# Altium integrated library BViet_Altium_Lib.IntLib: 529 symbols (part 1 of 25)
Pins are listed as number, name and electrical type; pins without a type are passive.

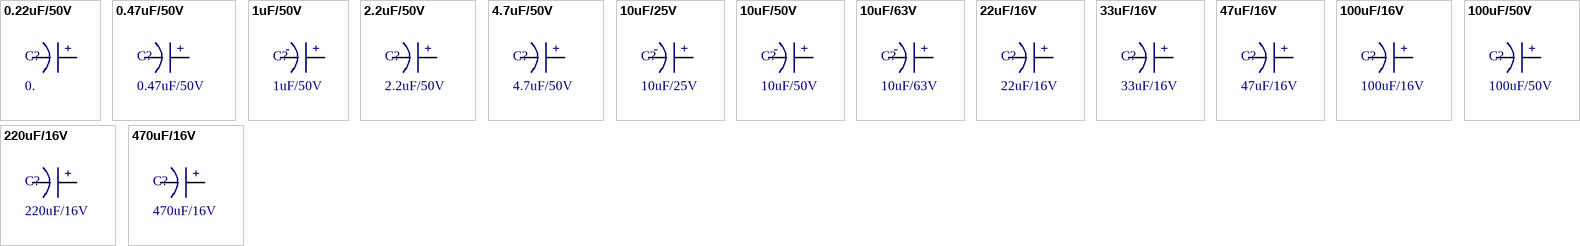
[diagram p0: symbols 0.22uF/50V to 470uF/16V]

## 0.22uF/50V
designator C?, comment 0.
Electrolytic Capacitor 0.22uF/50V
footprint 0.22uF/50V (ELECTROLYTIC CAPACITOR 4mm)
pins: 1, 2  2
text: +

## 0.47uF/50V
designator C?
Electrolytic Capacitor 0.47uF/50V
footprint 0.47uF/50V (ELECTROLYTIC CAPACITOR 4mm)
pins: 1, 2  2
text: +

## 1uF/50V
designator C?
Electrolytic Capacitor 1uF/50V
footprint 1uF/50V
pins: 1, 2  2
text: -; +

## 2.2uF/50V
designator C?
Electrolytic Capacitor 2.2uF/50V
footprint 2.2uF/50V (ELECTROLYTIC CAPACITOR 4mm)
pins: 1, 2  2
text: +

## 4.7uF/50V
designator C?
Electrolytic Capacitor 4.7uF/50V
footprint 4.7uF/50V (ELECTROLYTIC CAPACITOR 4mm)
pins: 1, 2  2
text: +

## 10uF/25V
designator C?
Electrolytic Capacitor 10uF/25V
footprint 10uF/25V 4mm (ELECTROLYTIC CAPACITOR 4mm)
footprint 10uF/25V 5mm (ELECTROLYTIC CAPACITOR 5mm)
pins: 1, 2  2
text: -; +

## 10uF/50V
designator C?
Electrolytic Capacitor 10uF/50V
footprint 10uF/50V (ELECTROLYTIC CAPACITOR 4mm)
pins: 1, 2  2
text: -; +

## 10uF/63V
designator C?
Electrolytic Capacitor 10uF/63V
footprint 10uF/63V
pins: 1, 2  2
text: -; +

## 22uF/16V
designator C?
Electrolytic Capacitor 22uF/16V
footprint 22uF/16V (ELECTROLYTIC CAPACITOR 5mm)
pins: 1, 2  2
text: +

## 33uF/16V
designator C?
Electrolytic Capacitor 33uF/16V
footprint 33uF/16V (ELECTROLYTIC CAPACITOR 5mm)
pins: 1, 2  2
text: +

## 47uF/16V
designator C?
Electrolytic Capacitor 47uF/16V
footprint 47uF/16V (ELECTROLYTIC CAPACITOR 4mm)
pins: 1, 2  2
text: +

## 100uF/16V
designator C?
Electrolytic Capacitor 100uF/16V
footprint 100uF/16V (ELECTROLYTIC CAPACITOR 6mm)
pins: 1, 2  2
text: +

## 100uF/50V
designator C?
Electrolytic Capacitor 100uF/50V
footprint 100uF/50V (ELECTROLYTIC CAPACITOR 4mm)
pins: 1, 2  2
text: +

## 220uF/16V
designator C?
Electrolytic Capacitor 220uF/16V
footprint 220uF/16V (ELECTROLYTIC CAPACITOR 6mm)
pins: 1, 2  2
text: +

## 470uF/16V
designator C?
Electrolytic Capacitor 470uF/16V
footprint 470uF/16V (ELECTROLYTIC CAPACITOR 6mm)
pins: 1, 2  2
text: +


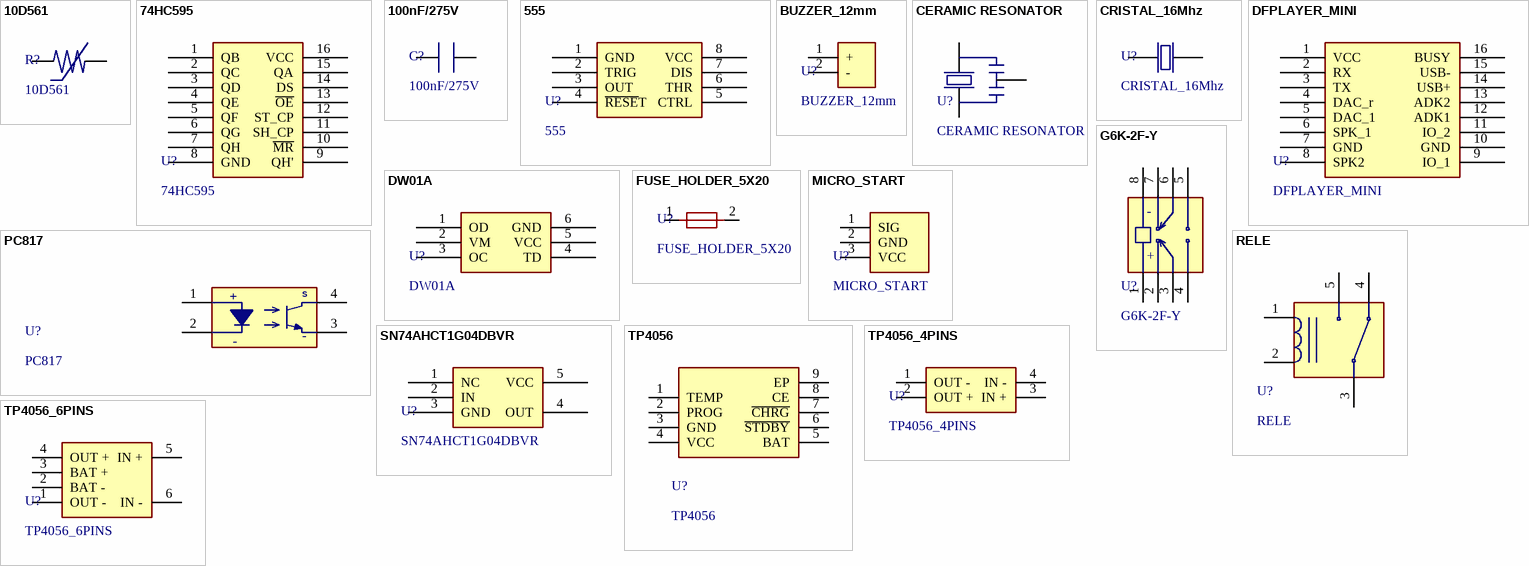
[diagram p1: symbols 10D561 to TP4056_6PINS]

## 10D561
designator R?
footprint 10D561
pins: 1, 2

## 74HC595
designator U?
SHIFT REGISTER 8-BIT DIP-16; ComponentLink1Description: Datasheet; ComponentLink1URL: https://www.ti.com/lit/ds/symlink/sn74hc595.pdf?ts=1673556046554&ref_url=https%253A%252F%252Fwww.ti.com%252Fproduct%252FSN74HC595; JLCPCB PN: C110383
footprint 74HC595 (SHIFT REGISTER 8-BIT DIP-16)
pins: 1 QB, 2 QC, 3 QD, 4 QE, 5 QF, 6 QG, 7 QH, 8 GND, 9 QH', 10 ~{MR}, 11 SH_CP, 12 ST_CP, 13 ~{OE}, 14 DS, 15 QA, 16 VCC

## 100nF/275V
designator C?
footprint 100nF/275V
pins: 1, 2

## 555
designator U?
CI TIMER/OSCILATOR 100kHz; ComponentLink1Description: Datasheet; ComponentLink1URL: https://www.ti.com/lit/ds/symlink/ne555.pdf?HQS=dis-mous-null-mousermode-dsf-pf-null-wwe&ts=1678668318661&ref_url=https%253A%252F%252Fwww.mouser.com%252F; JLCPCB PN SMD: C181735; JLCPCB PN DIP: C398063
footprint NE555_PTH
footprint NE555_SMD
pins: 1 GND, 2 TRIG, 3 OUT, 4 ~{RESE}T, 5 CTRL, 6 THR, 7 DIS, 8 VCC

## BUZZER_12mm
designator U?
BUZZER MAGNETIC 12MM; Digikey PN: 433-WT-1209T-ND; Mouser PN: 433-WT-1209T-ND; JLCPCB PN: C781866
footprint BUZZER_12mm (BUZZER MAGNETIC 12MM)
pins: 1 +, 2 -

## CERAMIC RESONATOR
designator U?
Generic Ceramic Ressonator 3.2x1.3mm
footprint CERAMIC_RESONATOR
pins: 1 (power), 2 (power), 3 (power)

## CRISTAL_16Mhz
designator U?
CRYSTAL 16MHZ, PTH and SMD; Mouser PN: 449-LFXTAL022786BULK; Digikey PN: 3155-16M20P2/49US-ND
footprint CRISTAL_16Mhz (CRYSTAL 16MHZ PTH)
footprint CRISTAL_16Mhz_SMD
pins: 1 (power), 2 (power)

## DFPLAYER_MINI
designator U?
MP3 Module, 3W, 3.3-5V.
footprint DFPLAYER_MINI
pins: 1 VCC, 2 RX, 3 TX, 4 DAC_r, 5 DAC_1, 6 SPK_1, 7 GND, 8 SPK2, 9 IO_1, 10 GND, 11 IO_2, 12 ADK1, 13 ADK2, 14 USB+, 15 USB-, 16 BUSY

## DW01A
designator U?
BATTERY PROTECTION IC  SOT-23-6; ComponentLink1Description: Datasheet; ComponentLink1URL: https://datasheet.lcsc.com/szlcsc/1901091236_PUOLOP-DW01A_C351410.pdf; JLCPCB PN: C2927799
footprint DW01A (BATTERY PROTECTION IC)
pins: 1 OD, 2 VM, 3 OC, 4 TD, 5 VCC, 6 GND

## FUSE_HOLDER_5X20
designator U?
footprint FUSE_HOLDER_5X20
pins: 1, 2

## G6K-2F-Y
designator U?
Micro Relé SMD Dual Channel, 5V/12V/24V, 6.5x10mm.
footprint G6K-2F-Y
pins: 1, 2, 3, 4, 5, 6, 7, 8
text: -; +

## MICRO_START
designator U?
Module Start for Robbot Sumo.
footprint MICRO_START
pins: 1 SIG, 2 GND, 3 VCC

## PC817
designator U?
Optocouplers Phototransistor 4 Pins, DIP and SMD.; ComponentLink1Description: Datasheet; ComponentLink1URL: https://www.farnell.com/datasheets/73758.pdf; JLCPCB PN SMD: C3025164; JLCPCB PN DIP: C3008368
footprint PC817_SMD
footprint PC817_DIP
pins: 1 VCC, 2 GND, 3 GND, 4 SIGNAL
text: +; S; -

## RELE
designator U?
Generic Rele PTH 5 Pins.
footprint RELE
pins: 1, 2, 3, 4, 5

## SN74AHCT1G04DBVR
designator U?
CI SINGLE INVERTER GATE, SOT-23-5.; Digikey PN: 296-1112-2-ND; Mouser PN: 595-SN74AHCT1G04DBVR; ComponentLink1Description: Datasheet; ComponentLink1URL: https://www.ti.com/lit/ds/symlink/sn74ahct1g04.pdf?ts=1678680622800&ref_url=https%253A%252F%252Fwww.google.com%252F; JLCPCB PN: C30326
footprint SN74AHCT1G04DBVR
pins: 1 NC, 2 IN, 3 GND, 4 OUT, 5 VCC

## TP4056
designator U?
CHIP BATTERY CHARGER 1A SOP-8-EP; ComponentLink1Description: Datasheet; ComponentLink1URL: https://dlnmh9ip6v2uc.cloudfront.net/datasheets/Prototyping/TP4056.pdf; JLCPCB PN: C725790
footprint TP4056 (CHIP BATTERY CHARGER)
pins: 1 TEMP, 2 PROG, 3 GND, 4 VCC, 5 BAT, 6 ~{STDBY}, 7 ~{CHRG}, 8 CE, 9 EP

## TP4056_4PINS
designator U?
MODULE BATTERY CHARGER 4 PINS
footprint TP4056_4PINs (MODULE BATTERY CHARGER)
pins: 1 OUT -, 2 OUT +, 3 IN +, 4 IN -

## TP4056_6PINS
designator U?
MODULE BATTERY CHARGER 6 PINS
footprint TP4056_6PINs (MODULE BATTERY CHARGER)
pins: 1 OUT -, 2 BAT -, 3 BAT +, 4 OUT +, 5 IN +, 6 IN -


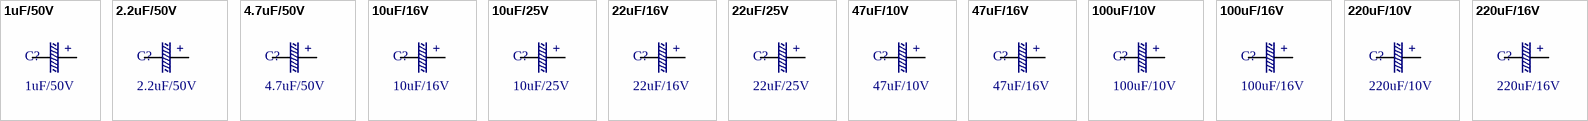
[diagram p2: symbols 1uF/50V to 220uF/16V]

## 1uF/50V
designator C?
Aluminum Capacitor 1uF/50V 4mm
footprint ALUMINUM_4mm (ALUMINUM CAPACITOR 4mm)
pins: 1, 2
text: +

## 2.2uF/50V
designator C?
Aluminum Capacitor 2.2uF/50V 4mm
footprint ALUMINUM_4mm (ALUMINUM CAPACITOR 4mm)
pins: 1, 2
text: +

## 4.7uF/50V
designator C?
Aluminum Capacitor 4.7uF/50V 4mm
footprint ALUMINUM_4mm (ALUMINUM CAPACITOR 4mm)
pins: 1, 2
text: +

## 10uF/16V
designator C?
Aluminum Capacitor 10uF/16V 4mm
footprint ALUMINUM_4mm (ALUMINUM CAPACITOR 4mm)
pins: 1, 2
text: +

## 10uF/25V
designator C?
Aluminum Capacitor 10uF/25V 4mm
footprint ALUMINUM_4mm (ALUMINUM CAPACITOR 4mm)
pins: 1, 2
text: +

## 22uF/16V
designator C?
Aluminum Capacitor 22uF/16V 4mm
footprint ALUMINUM_4mm (ALUMINUM CAPACITOR 4mm)
pins: 1, 2
text: +

## 22uF/25V
designator C?
Aluminum Capacitor 22uF/25V 5mm
footprint ALUMINUM_5mm (ALUMINUM CAPACITOR 5mm)
pins: 1, 2
text: +

## 47uF/10V
designator C?
Aluminum Capacitor 47uF/10V 4mm
footprint ALUMINUM_4mm (ALUMINUM CAPACITOR 4mm)
pins: 1, 2
text: +

## 47uF/16V
designator C?
Aluminum Capacitor 47uF/16V 5mm
footprint ALUMINUM_5mm (ALUMINUM CAPACITOR 5mm)
pins: 1, 2
text: +

## 100uF/10V
designator C?
Aluminum Capacitor 100uF/10V 5mm
footprint ALUMINUM_5mm (ALUMINUM CAPACITOR 5mm)
pins: 1, 2
text: +

## 100uF/16V
designator C?
Aluminum Capacitor 100uF/16V 7mm
footprint ALUMINUM_7mm (ALUMINUM CAPACITOR 7mm)
pins: 1, 2
text: +

## 220uF/10V
designator C?
Aluminum Capacitor 220uF/10V 7mm
footprint ALUMINUM_7mm (ALUMINUM CAPACITOR 7mm)
pins: 1, 2
text: +

## 220uF/16V
designator C?
Aluminum Capacitor 220uF/16V 7mm
footprint ALUMINUM_7mm (ALUMINUM CAPACITOR 7mm)
pins: 1, 2
text: +


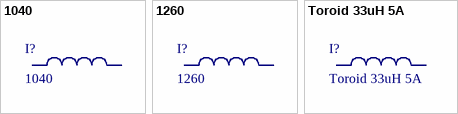
[diagram p3: symbols 1040 to Toroid 33uH 5A]

## 1040
designator I?
Generic Encapsulated Inductor 1040.
footprint 1040
pins: 1, 2

## 1260
designator I?
Generic Encapsulated Inductor 1260.
footprint 1260
pins: 1, 2

## Toroid 33uH 5A
designator I?
Toroid 33uH 5A 14x6mm Pitch 5mm.
footprint Toroid_33uH_5A (Toroid 14mmx6mm Pitch 5mm)
pins: 1, 2


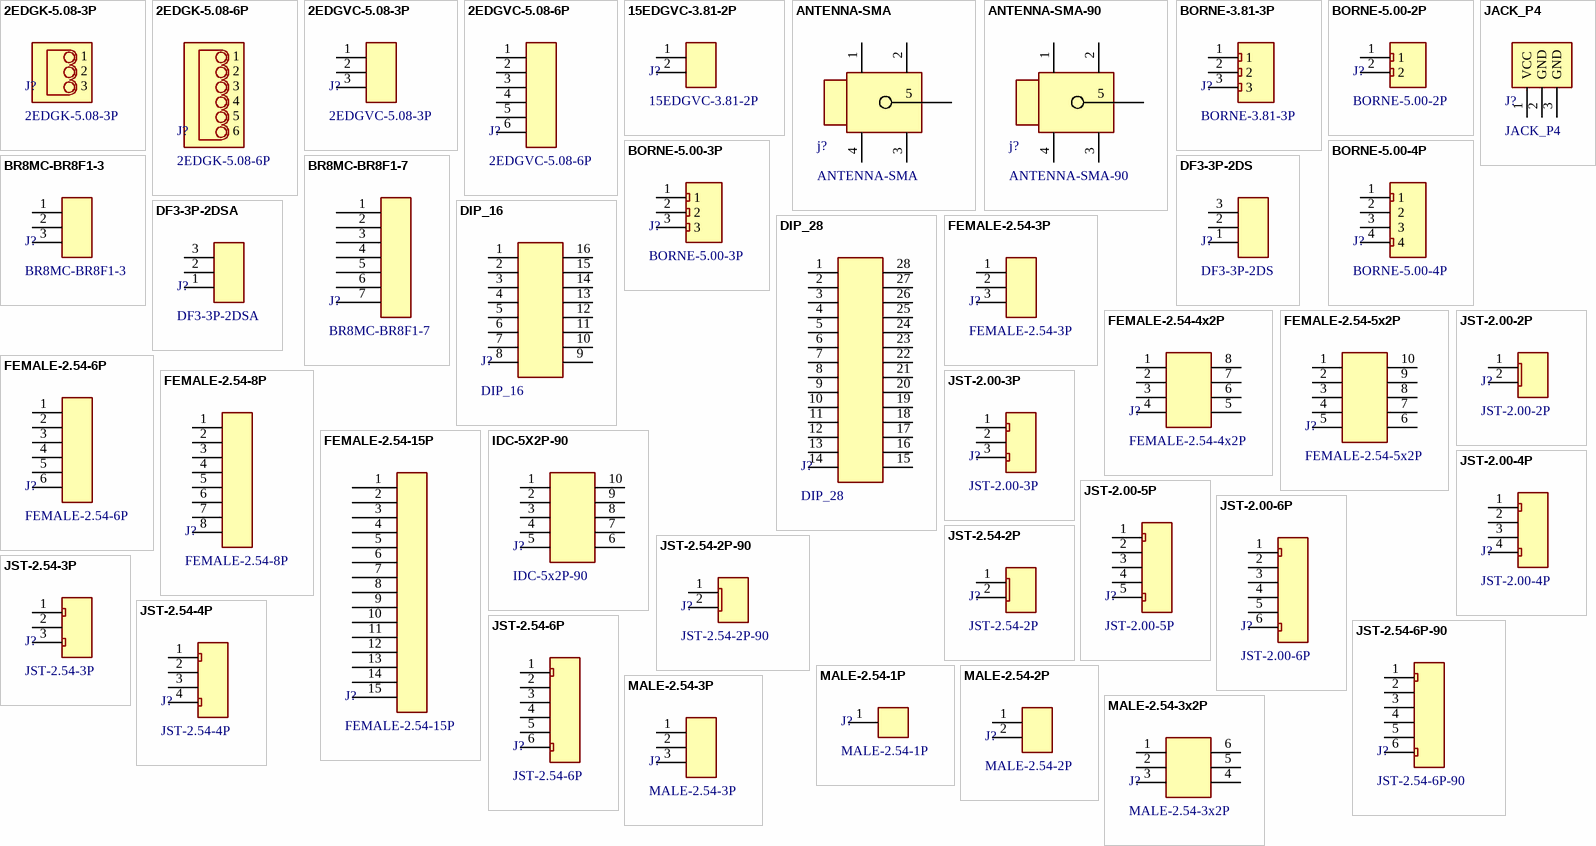
[diagram p4: symbols 2EDGK-5.08-3P to MALE-2.54-3x2P]

## 2EDGK-5.08-3P
designator J?
Male Connector KF2EDGK-6P, pitch 5.08mm.; JLCPCB PN: C440881
footprint 2EDGK-5.08-3P
text: 1; 2; 3

## 2EDGK-5.08-6P
designator J?
Male Connector KF2EDGK-3P, pitch 5.08mm.; JLCPCB PN: C440884
footprint 2EDGK-5.08-6P
text: 1; 2; 3; 4; 5; 6

## 2EDGVC-5.08-3P
designator J?
Female Connector KF2EDGVC-3P, pitch 5.08mm.; JLCPCB PN: C441387
footprint 2EDGVC-5.08-3P
pins: 1, 2, 3

## 2EDGVC-5.08-6P
designator J?
Female Connector KF2EDGVC-6P, pitch 5.08mm.; JLCPCB PN: C441390
footprint 2EDGVC-5.08-6P
pins: 1, 2, 3, 4, 5, 6

## 15EDGVC-3.81-2P
designator J?
Female Connector 15EDGVC-2P, pitch 3.81mm.; JLCPCB PN: C8396
footprint 15EDGVC-3.81-2P
pins: 1, 2

## ANTENNA-SMA
designator j?
Connector SMA for Antenna.; JLCPCB PN: C504007
footprint ANTENNA-SMA
pins: 1, 2, 3, 4, 5

## ANTENNA-SMA-90
designator j?
Connector SMA for Antenna, 90º.; JLCPCB PN: C914554
footprint ANTENNA-SMA-90
pins: 1, 2, 3, 4, 5

## BORNE-3.81-3P
designator J?
Borne 3 Vias, Pitch 3.81mm.
footprint BORNE-3.81-3P
pins: 1, 2, 3

## BORNE-5.00-2P
designator J?
Borne 2 Vias, Pitch 5mm.; JLCPCB PN: C91153
footprint BORNE-5.00-2P
pins: 1, 2

## BORNE-5.00-3P
designator J?
Borne 3 Vias, Pitch 5mm.; JLCPCB PN: C91154
footprint BORNE-5.00-3P
pins: 1, 2, 3

## BORNE-5.00-4P
designator J?
Borne 4 Vias, Pitch 5mm.; JLCPCB PN: C2915641
footprint BORNE-5.00-4P
pins: 1, 2, 3, 4

## BR8MC-BR8F1-3
designator J?
footprint BR8MC-BR8F1-3
pins: 1, 2, 3

## BR8MC-BR8F1-7
designator J?
footprint BR8MC-BR8F1-7
pins: 1, 2, 3, 4, 5, 6, 7

## DF3-3P-2DS
designator J?
Angled Female Connector 3 Pins, 2mm.; Digikey PN: H2106-ND
footprint DF3-3P-2DS
pins: 1, 2, 3

## DF3-3P-2DSA
designator J?
Right Female Connector 3 Pins, 2mm.; Digikey PN: H3922-ND
footprint DF3-3P-2DSA
pins: 1, 2, 3

## DIP_16
designator J?
Dip 16 Pins; JLCPCB PN: C2874010
footprint DIP_16
pins: 1, 2, 3, 4, 5, 6, 7, 8, 9, 10, 11, 12, 13, 14, 15, 16

## DIP_28
designator J?
Dip 28 Pins; JLCPCB PN: C2874014
footprint DIP_28
pins: 1, 2, 3, 4, 5, 6, 7, 8, 9, 10, 11, 12, 13, 14, 15, 16, 17, 18, 19, 20, 21, 22, 23, 24, 25, 26, 27, 28

## FEMALE-2.54-3P
designator J?
Female Header Connector 2.54mm 3 Pins.; JLCPCB PN: C5116529
footprint FEMALE-2.54-3P
pins: 1, 2, 3

## FEMALE-2.54-4x2P
designator J?
Female Header Connector 2.54mm 4x2 Pins.; JLCPCB PN: C2977588
footprint FEMALE-2.54-4x2P
pins: 1, 2, 3, 4, 5, 6, 7, 8

## FEMALE-2.54-5x2P
designator J?
Female Header Connector 2.54mm 5x2 Pins.; JLCPCB PN: C2977587
footprint FEMALE-2.54-5x2P
pins: 1, 2, 3, 4, 5, 6, 7, 8, 9, 10

## FEMALE-2.54-6P
designator J?
Female Header Connector 2.54mm 6 Pins.; JLCPCB PN: C5224026
footprint FEMALE-2.54-6P
pins: 1, 2, 3, 4, 5, 6

## FEMALE-2.54-8P
designator J?
Female Header Connector 2.54mm 8 Pins.; JLCPCB PN: C5224027
footprint FEMALE-2.54-8P
pins: 1, 2, 3, 4, 5, 6, 7, 8

## FEMALE-2.54-15P
designator J?
Female Header Connector 2.54mm 15 Pins.; JLCPCB PN: C2897378
footprint FEMALE-2.54-15P
pins: 1, 2, 3, 4, 5, 6, 7, 8, 9, 10, 11, 12, 13, 14, 15

## IDC-5X2P-90
designator J?, comment IDC-5x2P-90
IDC Connector 5X2P, 90º; JLCPCB PN: C492448
footprint IDC-5X2P-90
pins: 1, 2, 3, 4, 5, 6, 7, 8, 9, 10

## JACK_P4
designator J?
9V Battery Connector Jack P4.
footprint JACK_P4
pins: 1 VCC, 2 GND, 3 GND

## JST-2.00-2P
designator J?
Female Connector JST 2 Vias, 2.00mm.; JLCPCB PN: C5175230
footprint JST-2.00-2P
pins: 1, 2

## JST-2.00-3P
designator J?
Female Connector JST 3 Vias, 2.00mm.; JLCPCB PN: C5175231
footprint JST-2.00-3P
pins: 1, 2, 3

## JST-2.00-4P
designator J?
Female Connector JST 4 Vias, 2.00mm.; JLCPCB PN: C5175232
footprint JST-2.00-4P
pins: 1, 2, 3, 4

## JST-2.00-5P
designator J?
Female Connector JST 5 Vias, 2.00mm.; JLCPCB PN: C5175233
footprint JST-2.00-5P
pins: 1, 2, 3, 4, 5

## JST-2.00-6P
designator J?
Female Connector JST 6 Vias, 2.00mm.; JLCPCB PN: C5175234
footprint JST-2.00-6P
pins: 1, 2, 3, 4, 5, 6

## JST-2.54-2P
designator J?
Female Connector JST 2 Vias, 2.54mm.
footprint JST-2.54-2P
pins: 1, 2

## JST-2.54-2P-90
designator J?
Female Connector JST 2 Vias, 2.54mm 90º.
footprint JST-2.54-2P-90
pins: 1, 2

## JST-2.54-3P
designator J?
Female Connector JST 3 Vias, 2.54mm.
footprint JST-2.54-3P
pins: 1, 2, 3

## JST-2.54-4P
designator J?
Female Connector JST 4 Vias, 2.54mm.
footprint JST-2.54-4P
pins: 1, 2, 3, 4

## JST-2.54-6P
designator J?
Female Connector JST 6 Vias, 2.54mm.
footprint JST-2.54-6P
pins: 1, 2, 3, 4, 5, 6

## JST-2.54-6P-90
designator J?
Female Connector JST 6 Vias, 2.54mm 90º.
footprint JST-2.54-6P-90
pins: 1, 2, 3, 4, 5, 6

## MALE-2.54-1P
designator J?
Male Header Connector 2.54mm 1 Pins.; JLCPCB PN: C492400
footprint MALE-2.54-1P
pins: 1

## MALE-2.54-2P
designator J?
Male Header Connector 2.54mm 2 Pins.; JLCPCB PN: C492401
footprint MALE-2.54-2P
pins: 1, 2

## MALE-2.54-3P
designator J?
Male Header Connector 2.54mm 3 Pins.; JLCPCB PN: C492402
footprint MALE-2.54-3P
pins: 1, 2, 3

## MALE-2.54-3x2P
designator J?
Male Header Connector 2.54mm 3x2 Pins.; JLCPCB PN: C65114
footprint MALE-2.54-3x2P
pins: 1, 2, 3, 4, 5, 6

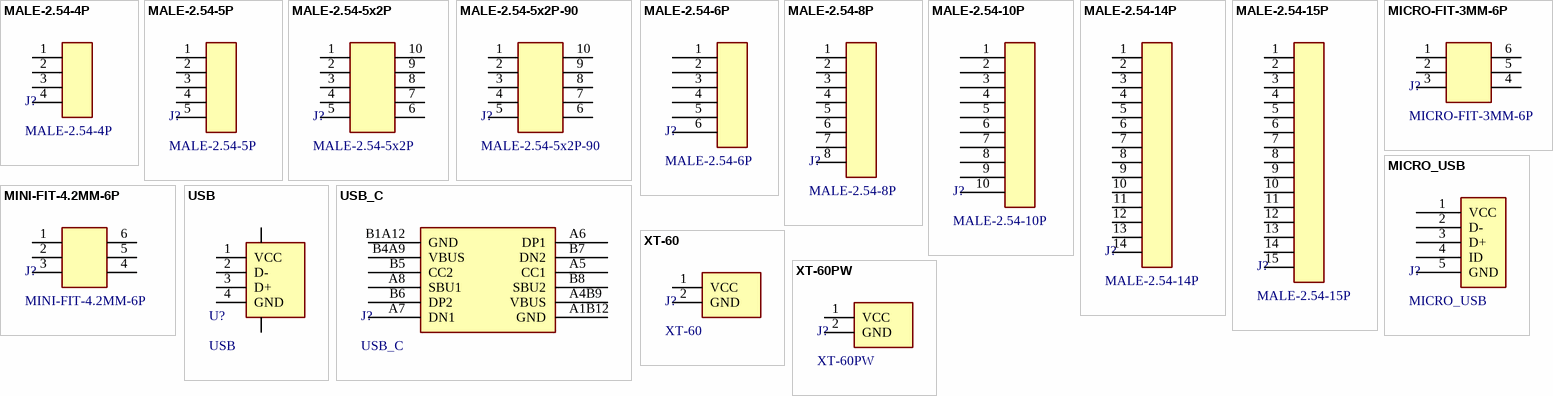
[diagram p5: symbols MALE-2.54-4P to XT-60PW]

## MALE-2.54-4P
designator J?
Male Header Connector 2.54mm 4 Pins.; JLCPCB PN: C492403
footprint MALE-2.54-4P
pins: 1, 2, 3, 4

## MALE-2.54-5P
designator J?
Male Header Connector 2.54mm 5 Pins.; JLCPCB PN: C492404
footprint MALE-2.54-5P
pins: 1, 2, 3, 4, 5

## MALE-2.54-5x2P
designator J?
Male Header Connector 2.54mm 5x2 Pins.; JLCPCB PN: C492422
footprint MALE-2.54-5x2P
pins: 1, 2, 3, 4, 5, 6, 7, 8, 9, 10

## MALE-2.54-5x2P-90
designator J?
Male Header Angled Connector 2.54mm 5X2 Pins.; JLCPCB PN: C492433
footprint MALE-2.54-5x2P-90
pins: 1, 2, 3, 4, 5, 6, 7, 8, 9, 10

## MALE-2.54-6P
designator J?
Male Header Connector 2.54mm 6 Pins.; JLCPCB PN: C492405
footprint MALE-2.54-6P
pins: 1, 2, 3, 4, 5, 6

## MALE-2.54-8P
designator J?
Male Header Connector 2.54mm 8 Pins.; JLCPCB  PN: C492407
footprint MALE-2.54-8P
pins: 1, 2, 3, 4, 5, 6, 7, 8

## MALE-2.54-10P
designator J?
Male Header Connector 2.54mm 10 Pins.; JLCPCB PN: C492409
footprint MALE-2.54-10P
pins: 1, 2, 3, 4, 5, 6, 7, 8, 9, 10

## MALE-2.54-14P
designator J?
Male Header Connector 2.54mm 14 Pins.
footprint MALE-2.54-14P
pins: 1, 2, 3, 4, 5, 6, 7, 8, 9, 10, 11, 12, 13, 14

## MALE-2.54-15P
designator J?
Male Header Connector 2.54mm 15 Pins.
footprint MALE-2.54-15P
pins: 1, 2, 3, 4, 5, 6, 7, 8, 9, 10, 11, 12, 13, 14, 15

## MICRO-FIT-3MM-6P
designator J?
footprint MICRO-FIT-3MM-6P
pins: 1, 2, 3, 4, 5, 6

## MICRO_USB
designator J?
MICRO USB Connector SMD.; JLCPCB PN: C145792
footprint MICRO_USB
pins: 1 VCC, 2 D-, 3 D+, 4 ID, 5 GND

## MINI-FIT-4.2MM-6P
designator J?
footprint MINI-FIT-4.2MM-6P
pins: 1, 2, 3, 4, 5, 6

## USB
designator U?
footprint USB
pins: 1 VCC, 2 D-, 3 D+, 4 GND

## USB_C
designator J?
3A USB Type C SMD 16 Pins; JLCPCB PN: C2927037
footprint USB_C
pins: A1B12 GND, A4B9 VBUS, A5 CC1, A6 DP1, A7 DN1, A8 SBU1, B1A12 GND, B4A9 VBUS, B5 CC2, B6 DP2, B7 DN2, B8 SBU2

## XT-60
designator J?
Power Connector XT-60, Male and Female.; JLCPCB PN F: C98734; JLCPCB PN M: C98733
footprint XT-60-Male
footprint XT-60-Female
pins: 1 VCC, 2 GND

## XT-60PW
designator J?
Power Connector XT-60PW, Male and Female.; JLCPCB PN F: C9900000737; JLCPCB PN M: C98732
footprint XT-60PW-Female
footprint XT-60PW-Male
pins: 1 VCC, 2 GND


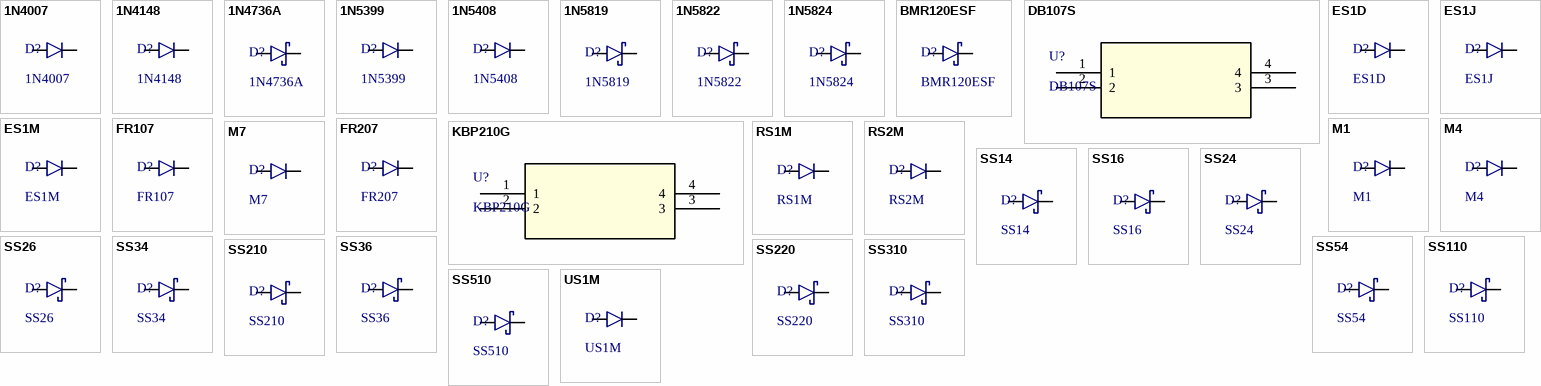
[diagram p6: symbols 1N4007 to US1M]

## 1N4007
designator D?
Rectifier Diode 1000V 1A DO-41; Mouser PN: 637-1N4007; ComponentLink1Description: Datasheet; ComponentLink1URL: https://www.mouser.com/datasheet/2/849/1n4001-2577232.pdf; Digikey PN: 4617-1N4007TB-ND; JLCPCB PN: C3033995
footprint 1N4007 (Rectifier Diode 1000V 1A DO-41)
pins: 1, 2  

## 1N4148
designator D?
Diode Gen Purp 75V 300mA DO35; Digikey PN: 1655-1N4148CT-ND; Mouser PN: 637-1N5399; JLCPCB PN: C14516
footprint 1N4148 (Diode Gen Purp 75V 300mA DO35)
pins: 1, 2  

## 1N4736A
designator D?
Zener Diode 6.8V 1W DO-41; JLCPCB PN: C2539
footprint 1N4736A
pins: 1, 2  

## 1N5399
designator D?
Diode Gen Purp 1000V 1.5A DO15; Digikey PN: 2156-1N5399-ND; JLCPCB PN: C402215
footprint 1N5399 (Diode Gen Purp 1000V 1.5A DO15)
pins: 1, 2  

## 1N5408
designator D?
Diode Gen Purp 1000V 3A DO15; Mouser PN: 637-1N5408; Digikey PN: 2156-1N5408-ND; JLCPCB PN: C402216
footprint 1N5408 (Diode Gen Purp 1000V 3A DO15)
pins: 1, 2  

## 1N5819
designator D?
Rectifier Schottky 40V 1A DO-15; Mouser PN: 637-1N5819; ComponentLink1Description: Datasheet; ComponentLink1URL: https://www.mouser.com/datasheet/2/849/1n5817-2577238.pdf; Digikey PN: 497-6610-1-ND; JLCPCB PN: C437199
footprint 1N5819 (Rectifier Schottky 40V 1A DO-15 10mm)
pins: 1, 2  

## 1N5822
designator D?
Diode Schottky 40V 3A DO201AD; Digikey PN: 497-11370-1-ND; Mouser PN: 511-1N5822; JLCPCB PN: C3018526
footprint DO201AD
pins: 1, 2  

## 1N5824
designator D?
Diode Schottky 30V 5A DO201AD; JLCPCB PN: C508482
footprint DO201AD
pins: 1, 2  

## BMR120ESF
designator D?
Rectifier Schottky 20V 1A SOD−123FL.; ComponentLink1Description: Datasheet; ComponentLink1URL: https://www.onsemi.com/pdf/datasheet/mbr120esft1-d.pdf
footprint MBR120ESF
pins: 1, 2  

## DB107S
designator U?
Description; Manufacturer_Name: Rectron; Copyright: Copyright (C) 2025 Ultra Librarian. All rights reserved.; Manufacturer_Part_Number: DB107S; RefDes: RefDes; Type: Type
footprint DB107S
pins: 1, 2, 3, 4

## ES1D
designator D?
Ultra Fast Recovery Rectifier 200V 1A SMA; Mouser PN: 512-ES1D; ComponentLink1Description: Datasheet; Digikey PN: ES1DFSTR-ND; JLCPCB PN: C1884566
footprint DIODE_SMA (Diode SMA)
pins: 1, 2  

## ES1J
designator D?
Ultra Fast Recovery Rectifier 600V 1A SMA; Mouser PN: 512-ES1J; ComponentLink1Description: Datasheet; Digikey PN: 4617-ES1JTR-ND; JLCPCB PN: C232830
footprint DIODE_SMA (Diode SMA)
pins: 1, 2  

## ES1M
designator D?
Ultra Fast Recovery Rectifier 1000V 1A SMA; Mouser PN: 833-ES1M-TP; ComponentLink1Description: Datasheet; Digikey PN: 1655-ES1MCT-ND; JLCPCB PN: C2891301
footprint DIODE_SMA (Diode SMA)
pins: 1, 2  

## FR107
designator D?
Diode Gen Purp 1000V 1A DO41; Digikey PN: 4617-FR107TB-ND; JLCPCB PN: C842808
footprint FR107 (Diode Gen Purp 1000V 1A DO41)
pins: 1, 2  

## FR207
designator D?
Diode Gen Purp 1000V 2A DO15; Digikey PN: 1655-FR207CT-ND; JLCPCB PN: C3011150
footprint FR207 (Diode Gen Purp 1000V 2A DO15)
pins: 1, 2  

## KBP210G
designator U?
Description; Manufacturer_Name: Diodes Inc; Copyright: Copyright (C) 2025 Ultra Librarian. All rights reserved.; Manufacturer_Part_Number: KBP210G; RefDes: RefDes; Type: Type
footprint KBP210G
pins: 1, 2, 3, 4

## M1
designator D?
Rectifiers Diode 50V 1A SMA; ComponentLink1Description: Datasheet; Mouser PN: 637-M7; Digikey PN: 3191-M7CT-ND; JLCPCB PN: C2909964
footprint DIODE_SMA (Diode SMA)
pins: 1, 2  

## M4
designator D?
Rectifiers Diode 400V 1A SMA; ComponentLink1Description: Datasheet; Mouser PN: 637-M4; Digikey PN: 3372-M4TR-ND; JLCPCB PN: C383019
footprint DIODE_SMA (Diode SMA)
pins: 1, 2  

## M7
designator D?
Rectifiers Diode 1000V 1A SMA; ComponentLink1Description: Datasheet; Mouser PN: 637-M7; Digikey PN: 3191-M7CT-ND; JLCPCB PN: C330214
footprint DIODE_SMA (Diode SMA)
pins: 1, 2  

## RS1M
designator D?
Fast Recovery Rectifier 1000V 1A SMA; Mouser PN: 512-RS1M; ComponentLink1Description: Datasheet; Digikey PN: 1655-RS1MTR-ND; JLCPCB PN: C2931775
footprint DIODE_SMA (Diode SMA)
pins: 1, 2  

## RS2M
designator D?
Fast Recovery Rectifier 1000V 2A SMA; Mouser PN: 821-RS2M; ComponentLink1Description: Datasheet; Digikey PN: 1801-RS2MTR-ND; JLCPCB PN: C2931776
footprint DIODE_SMA (Diode SMA)
pins: 1, 2  

## SS14
designator D?
Rectifier Schottky 40V 1A SMA; Mouser PN: 512-SS14; ComponentLink1Description: Datasheet; Digikey PN: SS14-E3/5ATGITR-ND; JLCPCB PN: C2837270
footprint DIODE_SMA (Diode SMA)
pins: 1, 2  

## SS16
designator D?
Rectifier Schottky 60V 1A SMA; Mouser PN: 821-SS16; ComponentLink1Description: Datasheet; Digikey PN: 2156-SS16-ND; JLCPCB PN: C908233
footprint DIODE_SMA (Diode SMA)
pins: 1, 2  

## SS24
designator D?
Rectifier Schottky 40V 2A SMA; Mouser PN: 821-SS24; ComponentLink1Description: Datasheet; Digikey PN: SS24S-M3/5ATGITR-ND; JLCPCB PN: C727055
footprint DIODE_SMA (Diode SMA)
pins: 1, 2  

## SS26
designator D?
Rectifier Schottky 60V 2A SMA; Mouser PN: 821-SS26; ComponentLink1Description: Datasheet; Digikey PN: 2156-SS26-ND; JLCPCB PN: C5123304
footprint DIODE_SMA (Diode SMA)
pins: 1, 2  

## SS34
designator D?
Rectifier Schottky 40V 3A SMA; Mouser PN: 512-SS34; ComponentLink1Description: Datasheet; Digikey PN: SS34FSTR-ND; JLCPCB: C2909963
footprint DIODE_SMA (Diode SMA)
pins: 1, 2  

## SS36
designator D?
Rectifier Schottky 60V 3A SMA; Mouser PN: 512-SS36; ComponentLink1Description: Datasheet; Digikey PN: SS36FSTR-ND; JLCPCB PN: C3011103
footprint DIODE_SMA (Diode SMA)
pins: 1, 2  

## SS54
designator D?
Rectifier Schottky 40V 5A SMA; JLCPCB PN: C727065
footprint DIODE_SMA (Diode SMA)
pins: 1, 2  

## SS110
designator D?
Rectifier Schottky 100V 1A SMA; Mouser PN: 821-SS110; ComponentLink1Description: Datasheet; Digikey PN: 1655-SS110TR-ND; JLCPCB PN: C727053
footprint DIODE_SMA (Diode SMA)
pins: 1, 2  

## SS210
designator D?
Rectifier Schottky 100V 2A SMB; Mouser PN: 821-SS210; ComponentLink1Description: Datasheet; Digikey PN: 1801-SS210TR-ND; JLCPCB PN: C3033282
footprint DIODE_SMB (Diode SMB)
pins: 1, 2  

## SS220
designator D?
Rectifier Schottky 200V 2A SMA; Mouser PN: 750-SS220-HF; ComponentLink1Description: Datasheet; Digikey PN: 4617-SS220TR-ND; JLCPCB PN: C432147
footprint DIODE_SMA (Diode SMA)
pins: 1, 2  

## SS310
designator D?
Rectifier Schottky 100V 3A SMB; Mouser PN: 821-SS310; ComponentLink1Description: Datasheet; Digikey PN: 1801-SS310TR-ND; JLCPCB PN: C330484
footprint DIODE_SMB (Diode SMB)
pins: 1, 2  

## SS510
designator D?
Rectifier Schottky 100V 5A SMC; Mouser PN: 750-SS510-HF; ComponentLink1Description: Datasheet; Digikey PN: 4617-SS510TR-ND; JLCPCB PN: C2887672
footprint DIODE_SMC (Diode SMC)
pins: 1, 2  

## US1M
designator D?
High Efficient Recovery Rectifier 1000V 1A SMA; Mouser PN: 821-US1M; ComponentLink1Description: Datasheet; Digikey PN: 4617-US1MTR-ND; JLCPCB PN: C330229
footprint DIODE_SMA (Diode SMA)
pins: 1, 2  


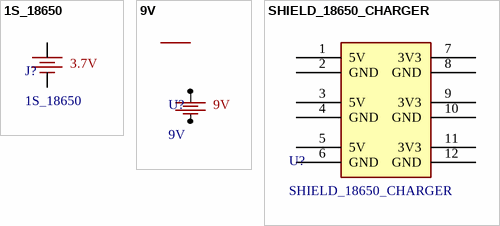
[diagram p7: symbols 1S_18650 to SHIELD_18650_CHARGER]

## 1S_18650
designator J?
Battery 18650 Holder for 1 Cell, SMD or PTH Version
footprint 1S_18650_PTH (Battery 18650 Holder for 1 Cell, PTH Version)
footprint 1S_18650_SMD (Battery 18650 Holder for 1 Cell, SMD Version)
pins: 1, 2
text: 3.7V

## 9V
designator U?
9V Battery Holder, only Representative, no Connection to Board
footprint 9V (9V Battery Holder, Representative, no Connection to Board)

## SHIELD_18650_CHARGER
designator U?
footprint SHIELD_18650_CHARGER
pins: 1 5V, 2 GND, 3 5V, 4 GND, 5 5V, 6 GND, 7 3V3, 8 GND, 9 3V3, 10 GND, 11 3V3, 12 GND


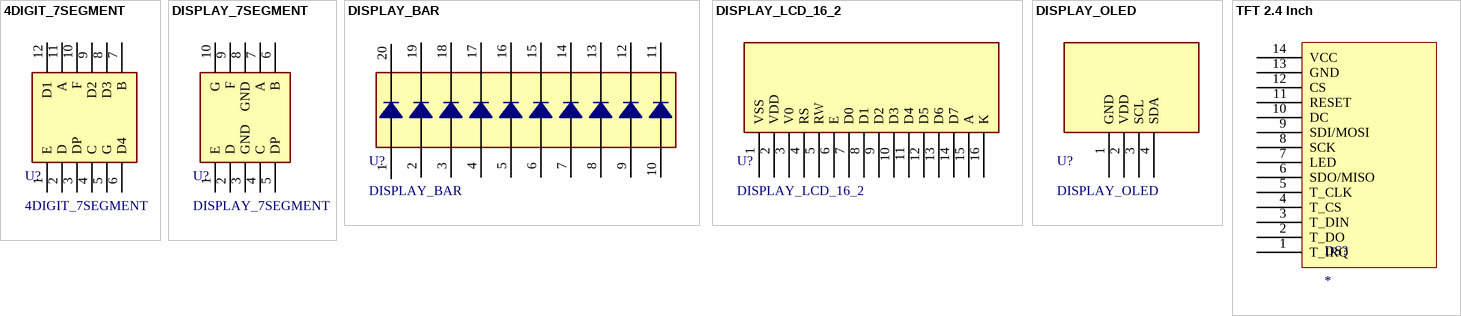
[diagram p8: symbols 4DIGIT_7SEGMENT to TFT 2.4 Inch]

## 4DIGIT_7SEGMENT
designator U?
Display 4 Digits 7 Segments.
footprint 4DIGIT_7SEGMENT
pins: 1 E, 2 D, 3 DP, 4 C, 5 G, 6 D4, 7 B, 8 D3, 9 D2, 10 F, 11 A, 12 D1

## DISPLAY_7SEGMENT
designator U?
Display 1 Digit 7 Segments Common Cathode.
footprint DISPLAY_7SEGEMENT
pins: 1 E, 2 D, 3 GND, 4 C, 5 DP, 6 B, 7 A, 8 GND, 9 F, 10 G

## DISPLAY_BAR
designator U?
Display 10 Barras de LED.
footprint DISPLAY_BAR
pins: 1, 2, 3, 4, 5, 6, 7, 8, 9, 10, 11, 12, 13, 14, 15, 16, 17, 18, 19, 20

## DISPLAY_LCD_16_2
designator U?
Display LCD 16x2 I2C.
footprint DISPLAY_LCD_16_2
pins: 1 VSS, 2 VDD, 3 V0, 4 RS, 5 RW, 6 E, 7 D0, 8 D1, 9 D2, 10 D3, 11 D4, 12 D5, 13 D6, 14 D7, 15 A, 16 K

## DISPLAY_OLED
designator U?
Display Oled 128x64 0.96" I2C.
footprint DISPLAY_OLED
pins: 1 GND (hiz), 2 VDD (hiz), 3 SCL (hiz), 4 SDA (hiz)

## TFT 2.4 Inch
designator DS?
2.4-inch TFT LCD module, 14-pin interface
footprint TFT 2.4 Inch
pins: 1 T_IRQ, 2 T_DO, 3 T_DIN, 4 T_CS, 5 T_CLK, 6 SDO/MISO, 7 LED, 8 SCK, 9 SDI/MOSI, 10 DC, 11 RESET, 12 CS, 13 GND, 14 VCC


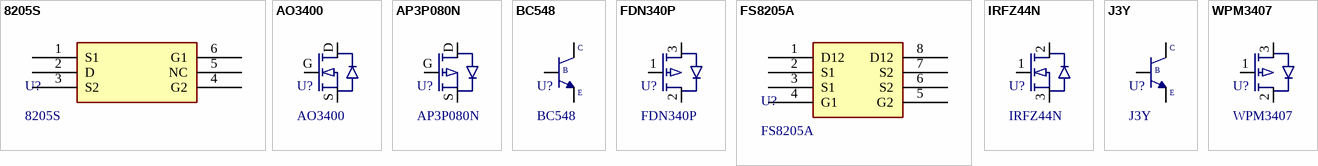
[diagram p9: symbols 8205S to WPM3407]

## 8205S
designator U?
20V DUAL N-CHANNEL MOSFET SOT-23-6; ComponentLink1Description: Datasheet; ComponentLink1URL: https://datasheet.lcsc.com/szlcsc/1911041205_TuoFeng-8205S_C436914.pdf; JLCPCB PN: C2762930
footprint 8205S (20V N-CHANNEL ENCHANCEMENT-MODE MOSFET)
pins: 1 S1, 2 D, 3 S2, 4 G2, 5 NC, 6 G1

## AO3400
designator U?
Mosfet NPN
footprint SOT23-3
pins: D, G, S

## AP3P080N
designator U?
Mosfet PNP
footprint SOT23-3
pins: D, G, S

## BC548
designator U?
Digikey PN: 4518-S8050CT-ND; ComponentLink1Description: Datasheet; ComponentLink1URL: https://media.digikey.com/pdf/Data%20Sheets/UTD%20Semi%20PDFs/S8050.pdf; JLCPCB PN: C2828466
footprint BC548
pins: 1 C, 2 B, 3 E

## FDN340P
designator U?
MOSFET SOT-23-3; JLCPCB PN: C2890122; ComponentLink1Description: Datasheet; ComponentLink1URL: https://www.onsemi.com/pdf/datasheet/fdn340p-d.pdf
footprint FDN340P
pins: 1, 2, 3

## FS8205A
designator U?
20V DUAL N-CHANNEL MOSFET TSSOP-8; ComponentLink1Description: Datasheet; ComponentLink1URL: https://www.ic-fortune.com/upload/Download/FS8205A-DS-12_EN.pdf; JLCPCB PN: C16052
footprint FS8205A (DUAL N-CHANNEL ENHACEMENT MODE POWER MOSFET)
pins: 1 D12, 2 S1, 3 S1, 4 G1, 5 G2, 6 S2, 7 S2, 8 D12

## IRFZ44N
designator U?
55V N-CHANNEL MOSFET TO-220-3; JLCPCB PN: C2586; ComponentLink1Description: Datasheet; ComponentLink1URL: https://www.infineon.com/dgdl/Infineon-IRFZ44N-DataSheet-v01_01-EN.pdf?fileId=5546d462533600a40153563b3a9f220d
footprint IRFZ44N (TO-220)
pins: 1, 2, 3

## J3Y
designator U?
TRANSISTOR BIPOLAR (BJT) NPN 25V 500mA SOT-23-3; Digikey PN: 4518-S8050CT-ND; ComponentLink1Description: Datasheet; ComponentLink1URL: https://media.digikey.com/pdf/Data%20Sheets/UTD%20Semi%20PDFs/S8050.pdf; JLCPCB PN: C2828466
footprint J3Y
pins: 1 B, 2 E, 3 C

## WPM3407
designator U?
MOSFET 30V 4.4A SOT-23; JLCPCB PN: C2987047; ComponentLink1Description: Datasheet; ComponentLink1URL: https://datasheet.lcsc.com/lcsc/1810202308_WILLSEMI-Will-Semicon-WPM3407-3-TR_C167139.pdf
footprint WPM3407
pins: 1, 2, 3


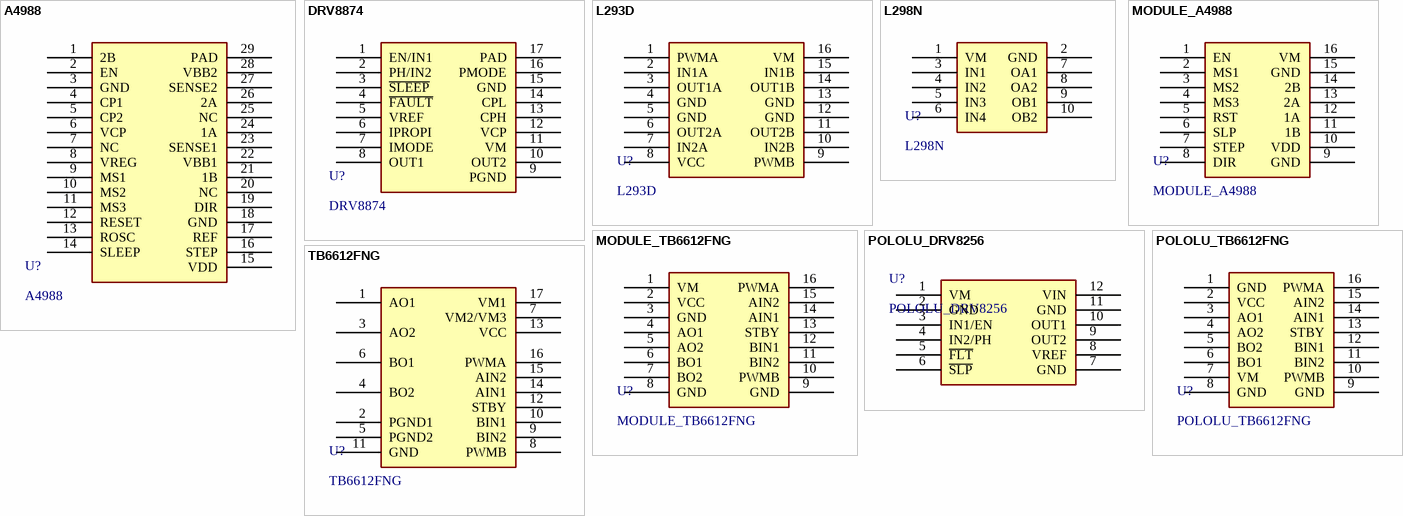
[diagram p10: symbols A4988 to TB6612FNG]

## A4988
designator U?
Stepper Motor Driver 8-35V 2A QFN-28
footprint A4988 (QFN-28)
pins: 1 2B, 2 EN, 3 GND, 4 CP1, 5 CP2, 6 VCP, 7 NC, 8 VREG, 9 MS1, 10 MS2, 11 MS3, 12 RESET, 13 ROSC, 14 SLEEP, 15 VDD, 16 STEP, 17 REF, 18 GND, 19 DIR, 20 NC, 21 1B, 22 VBB1, 23 SENSE1, 24 1A, 25 NC, 26 2A, 27 SENSE2, 28 VBB2, 29 PAD

## DRV8874
designator U?
Single Motor Driver w/ Current Sensor 4.5-37V 1.9A Continous 6A Peak 16-HTSSOP; ComponentLink1Description: Datasheet; ComponentLink1URL: https://www.ti.com/lit/ds/symlink/drv8874.pdf?HQS=dis-mous-null-mousermode-dsf-pf-null-wwe&ts=1673572731390&ref_url=https%253A%252F%252Fwww.mouser.com%252F; Digikey PN: 296-DRV8874PWPRCT-ND; Mouser PN: 595-DRV8874PWPR; JLCPCB PN: C1855818
footprint DRV8874 (Single Motor Driver w/ Current Sensor 4.5-37V 6A Peak 16-HTSSOP)
pins: 1 EN/IN1, 2 PH/IN2, 3 ~{SLEEP}, 4 ~{FAULT}, 5 VREF, 6 IPROPI, 7 IMODE, 8 OUT1, 9 PGND, 10 OUT2, 11 VM, 12 VCP, 13 CPH, 14 CPL, 15 GND, 16 PMODE, 17 PAD

## L293D
designator U?
Dual Motor Driver 4.5-36V 0.6A Continous 1.2A Peak DIP-16; ComponentLink1Description: Datasheet; ComponentLink1URL: https://www.mouser.com/datasheet/2/389/l293d-1849134.pdf; Mouser PN: 511-L293D; Digikey PN: 497-2936-5-ND; JLCPCB PN: C12340
footprint L293D (Dual Motor Driver 4.5-36V 1.2A Peak DIP-16)
pins: 1 PWMA, 2 IN1A, 3 OUT1A, 4 GND, 5 GND, 6 OUT2A, 7 IN2A, 8 VCC, 9 PWMB, 10 IN2B, 11 OUT2B, 12 GND, 13 GND, 14 OUT1B, 15 IN1B, 16 VM

## L298N
designator U?
footprint L298N
pins: 1 VM, 2 GND, 3 IN1, 4 IN2, 5 IN3, 6 IN4, 7 OA1, 8 OA2, 9 OB1, 10 OB2

## MODULE_A4988
designator U?
Module Stepper Motor Driver 8-35V 2A 20x15mm; ComponentLink1Description: Datasheet; ComponentLink1URL: https://www.pololu.com/file/0J450/a4988_DMOS_microstepping_driver_with_translator.pdf
footprint A4988 (Module Stepper Motor Driver 8-35V 2A 20x15mm)
pins: 1 EN, 2 MS1, 3 MS2, 4 MS3, 5 RST, 6 SLP, 7 STEP, 8 DIR, 9 GND, 10 VDD, 11 1B, 12 1A, 13 2A, 14 2B, 15 GND, 16 VM

## MODULE_TB6612FNG
designator U?
Module Dual Motor Driver 2.5-13.5V 3.2A Peak 21x18mm; ComponentLink1Description: Datasheet; ComponentLink1URL: https://www.mouser.com/datasheet/2/408/TB6612FNG_datasheet_en_20141001-708260.pdf
footprint MODULE_TB6612FNG (Module Dual Motor Driver 2.5-13.5V 3.2A Peak 21x18mm)
pins: 1 VM, 2 VCC, 3 GND, 4 AO1, 5 AO2, 6 BO1, 7 BO2, 8 GND, 9 GND, 10 PWMB, 11 BIN2, 12 BIN1, 13 STBY, 14 AIN1, 15 AIN2, 16 PWMA

## POLOLU_DRV8256
designator U?
Module Single Motor Driver w/ Current Sensor 4.5-48V 6.4A Peak 15.2x15.2mm; Datasheet: https://www.mouser.com/datasheet/2/408/TB6612FNG_datasheet_en_20141001-708260.pdf
footprint POLOLU_DRV8256 (Module Single Motor Driver w/ Current Sensor 4.5-48V 6.4A Peak 15.2x15.2mm)
pins: 1 VM, 2 GND, 3 IN1/EN, 4 IN2/PH, 5 ~{FLT}, 6 ~{SLP}, 7 GND, 8 VREF, 9 OUT2, 10 OUT1, 11 GND, 12 VIN

## POLOLU_TB6612FNG
designator U?
Module Dual Motor Driver 4.5-13.5V 3A Peak 20x15mm; ComponentLink1Description: Datasheet; ComponentLink1URL: https://www.mouser.com/datasheet/2/408/TB6612FNG_datasheet_en_20141001-708260.pdf
footprint POLOLU_TB6612FNG (Module Dual Motor Driver 4.5-13.5V 3A Peak 20x15mm)
pins: 1 GND, 2 VCC, 3 AO1, 4 AO2, 5 BO2, 6 BO1, 7 VM, 8 GND, 9 GND, 10 PWMB, 11 BIN2, 12 BIN1, 13 STBY, 14 AIN1, 15 AIN2, 16 PWMA

## TB6612FNG
designator U?
Dual Motor Driver 2.7-5.5V Logic 2.5-13.5V Motor 1A Continuos 3.2A Peak SSOP24; ComponentLink1Description: Datasheet; ComponentLink1URL: https://www.mouser.com/datasheet/2/408/TB6612FNG_datasheet_en_20141001-708260.pdf; Mouser PN: 757-TB6612FNGC8EL; Digikey PN: TB6612FNGC8ELCT-ND; JLCPCB PN: C141517
footprint TB6612FNG (Dual Motor Driver 2.5-13.5V 3.2A Peak SSOP24-P-300-0.65A)
pins: 1 AO1, 2 PGND1, 3 AO2, 4 BO2, 5 PGND2, 6 BO1, 7 VM2/VM3, 8 PWMB, 9 BIN2, 10 BIN1, 11 GND, 12 STBY, 13 VCC, 14 AIN1, 15 AIN2, 16 PWMA, 17 VM1


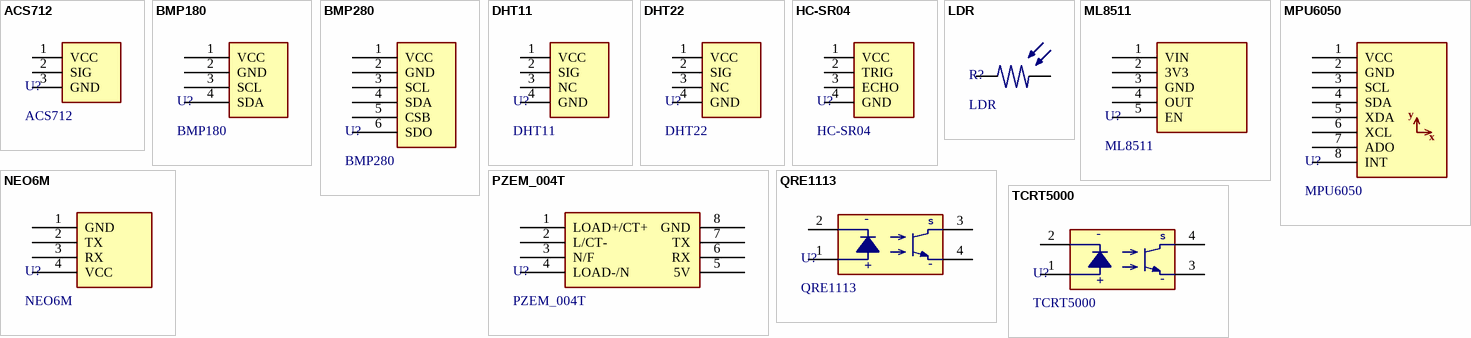
[diagram p11: symbols ACS712 to TCRT5000]

## ACS712
designator U?
footprint ACS712
pins: 1 VCC, 2 SIG, 3 GND

## BMP180
designator U?
SENSOR ATMOSPHERIC PRESSURE/TEMPERATURE
footprint BMP180
pins: 1 VCC, 2 GND, 3 SCL, 4 SDA

## BMP280
designator U?
SENSOR ATMOSPHERIC PRESSURE/TEMPERATURE/ALTITUDE
footprint BMP280 (SENSOR ATMOSPHERIC PRESSURE/TEMPERATURE/ALTITUDE)
pins: 1 VCC, 2 GND, 3 SCL, 4 SDA, 5 CSB, 6 SDO

## DHT11
designator U?
SENSOR HUMIDITY/TEMPERATURE; Digikey PN: 1528-1228-ND
footprint DHT11 (SENSOR HUMIDITY/TEMPERATURE)
pins: 1 VCC, 2 SIG, 3 NC, 4 GND

## DHT22
designator U?
SENSOR HUMIDITY/TEMPERATURE; Digikey PN: 1528-1228-ND
footprint DHT22_180
footprint DHT22_90
pins: 1 VCC, 2 SIG, 3 NC, 4 GND

## HC-SR04
designator U?
ULTRASONIC SENSOR 400CM; Digikey PN: 1568-1421-ND; Mouser PN: 375-HC-SR04
footprint HC-SR04 (ULTRASONIC SENSOR 400CM)
pins: 1 VCC, 2 TRIG, 3 ECHO, 4 GND

## LDR
designator R?
LIGHT DEPENDEND RESISTOR/PHOTORESITOR; Digikey PN: PDV-P8107-ND
footprint LDR (LIGHT DEPENDEND RESISTOR/PHOTORESITOR 3mm)
pins: 1, 2

## ML8511
designator U?
footprint ML8511
pins: 1 VIN, 2 3V3, 3 GND, 4 OUT, 5 EN

## MPU6050
designator U?
IMU ACCEL/GYRO 3-AXIS I2C; ComponentLink1Description: Datasheet; ComponentLink1URL: https://invensense.tdk.com/wp-content/uploads/2015/02/MPU-6000-Datasheet1.pdf
footprint MPU6050 (IMU ACCEL/GYRO 3-AXIS I2C)
pins: 1 VCC, 2 GND, 3 SCL, 4 SDA, 5 XDA, 6 XCL, 7 ADO, 8 INT
text: y; x

## NEO6M
designator U?
footprint NEO6M
pins: 1 GND, 2 TX, 3 RX, 4 VCC

## PZEM_004T
designator U?
footprint PZEM_004T
pins: 1 LOAD+/CT+, 2 L/CT-, 3 N/F, 4 LOAD-/N, 5 5V, 6 RX, 7 TX, 8 GND

## QRE1113
designator U?
REFLECTIVE OPTICAL SENSOR SMD; Digikey PN: 512-QRE1113GR; ComponentLink1Description: Datasheet; ComponentLink1URL: https://br.mouser.com/datasheet/2/308/QRE1113_D-1814544.pdf; JLCPCB PN: C232862
footprint QRE1113 (REFLECTIVE OPTICAL SENSOR SMD)
pins: 1 VCC, 2 GND, 3 SIGNAL, 4 GND
text: -; S; +

## TCRT5000
designator U?
REFLECTIVE OPTICAL SENSOR PTH; Mouser PN: 782-TCRT5000; ComponentLink1Description: Datasheet; ComponentLink1URL: https://br.mouser.com/datasheet/2/427/tcrt5000-1767618.pdf; JLCPCB PN: C2984661
footprint TCRT5000 (REFLECTIVE OPTICAL SENSOR PTH)
pins: 1 VCC, 2 GND, 3 GND, 4 SIGNAL
text: -; S; +


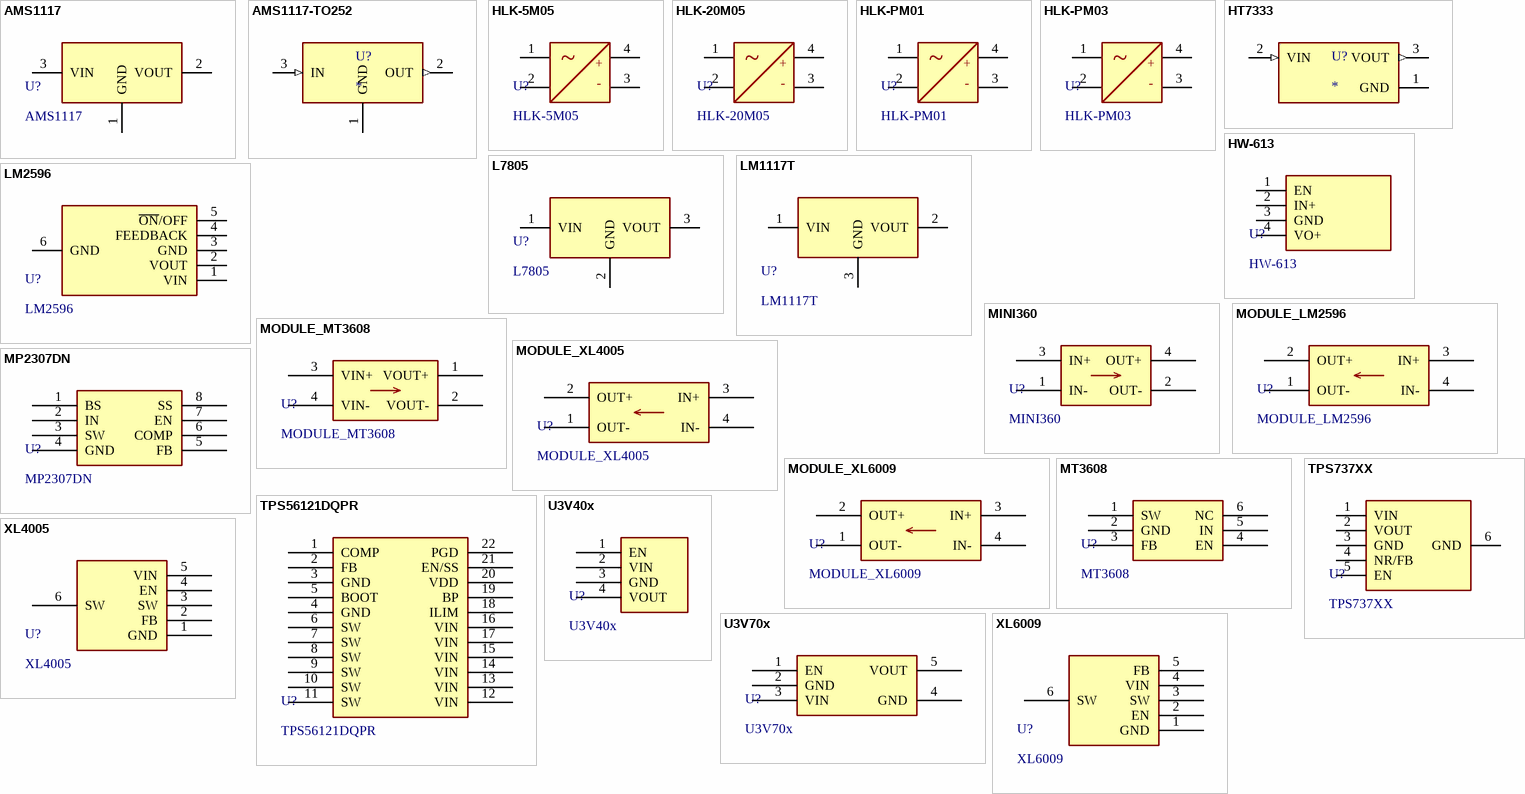
[diagram p12: symbols AMS1117 to XL6009]

## AMS1117
designator U?
IC REG LINEAR 1A SOT-89-3L; ComponentLink1Description: Datasheet; ComponentLink1URL: http://www.advanced-monolithic.com/pdf/ds1117.pdf; Digikey PN: 4518-AMS1117-3.3CT-ND; JLCPCB PN: C963410
footprint AMS1117 (SOT-223)
pins: 1 GND, 2 VOUT, 3 VIN

## AMS1117-TO252
designator U?
MP: AZ1117D-3.3TRE1; MF: Diodes Inc.; Package: TO-252-2 Diodes Inc.; Availability: In Stock; Price: None; Purchase-URL: https://pricing.snapeda.com/search/part/AZ1117D-3.3TRE1/?ref=eda; Check_prices: https://www.snapeda.com/parts/AZ1117D-3.3TRE1/Diodes+Inc./view-part/?ref=eda; SnapEDA_Link: https://www.snapeda.com/parts/AZ1117D-3.3TRE1/Diodes+Inc./view-part/?ref=snap; Value: *
footprint AMS117-TO252
pins: 1 GND (power), 2 OUT (out), 3 IN (in)

## HLK-5M05
designator U?
Mini Power Supply HLK-5M05 100~240VAC to 5VDC 1A 5W.
footprint HLK-5M05
pins: 1, 2, 3, 4
text: ~; +; -

## HLK-20M05
designator U?
Mini Power Supply HLK-20M05 100~240VAC to 5VDC 4A 20W.
footprint HLK-20M05
pins: 1, 2, 3, 4
text: ~; +; -

## HLK-PM01
designator U?
Mini Power Supply HLK-5M05 100~240VAC to 5VDC 0.6A 3W.
footprint HLK-PM01
pins: 1, 2, 3, 4
text: ~; +; -

## HLK-PM03
designator U?
Mini Power Supply HLK-PM03 100~240VAC to 3.3VDC 1A 3W.
footprint HLK-PM03
pins: 1, 2, 3, 4
text: ~; +; -

## HT7333
designator U?
Three-terminal, low power, high voltage regulator implemented in CMOS technology; MF: Holtek Semiconductor; MP: HT7333; SnapEDA_Link: https://www.snapeda.com/parts/HT7333/Holtek/view-part/?ref=snap; Package: None; Value: *; Check_prices: https://www.snapeda.com/parts/HT7333/Holtek/view-part/?ref=eda
footprint HT7333
pins: 1 GND (power), 2 VIN (in), 3 VOUT (out)

## HW-613
designator U?
MODULE BUCK STEP DOWN 3A 20x11mm
footprint HW-613
pins: 1 EN, 2 IN+, 3 GND, 4 VO+

## L7805
designator U?
IC REG LINEAR 5V 1.5A TO220AB; ComponentLink1Description: Datasheet; ComponentLink1URL: https://www.mouser.com/datasheet/2/389/l78-1849632.pdf; Mouser PN: 511-L7805CV; Digikey PN: 497-1443-5-ND; JLCPCB PN PTH: C347289; JLCPCB PN SMD: C15077
footprint L7805_90 (TO-220)
footprint L7805_180 (TO-220)
footprint L7805_smd (TO-252-3)
pins: 1 VIN, 2 GND, 3 VOUT

## LM1117T
designator U?
IC REG LINEAR 800MA TO220-3; ComponentLink1Description: Datasheet; ComponentLink1URL: https://www.ti.com/lit/ds/symlink/lm1117.pdf?HQS=dis-mous-null-mousermode-dsf-pf-null-wwe&ts=1673551072249&ref_url=https%253A%252F%252Fwww.mouser.com%252F; Mouser PN: 926-LM1117T-3.3/NOPB; Digikey PN: LM1117T-3.3/NOPB-ND; JLCPCB PN: C498319
footprint LM1117T_180 (TO-220)
footprint LM1117T_90 (TO-220)
pins: 1 VIN, 2 VOUT, 3 GND

## LM2596
designator U?
IC BUCK STEP DOWN 3A TO-263-6; ComponentLink1Description: Datasheet; ComponentLink1URL: https://www.ti.com/lit/ds/symlink/lm2596.pdf; Mouser PN: 863-LM2596DSADJG; Digikey PN: 4518-LM2596S-ADJCT-ND; JLCPCB PN: C2980822
footprint LM2596 (TO-263-5)
pins: 1 VIN, 2 VOUT, 3 GND, 4 FEEDBACK, 5 ~{ON}/OFF, 6 GND

## MINI360
designator U?
MODULE BUCK STEP DOWN 3A 18x12mm; ComponentLink1Description: Datasheet; ComponentLink1URL: https://cdn-shop.adafruit.com/datasheets/MP2307_r1.9.pdf
footprint MINI360 (MODULE BUCK STEP DOWN 3A 18x12mm)
pins: 1 IN-, 2 OUT-, 3 IN+, 4 OUT+

## MODULE_LM2596
designator U?
MODULE BUCK STEP DOWN 3A 43x20mm; ComponentLink1Description: Datasheet; ComponentLink1URL: https://www.ti.com/lit/ds/symlink/lm2596.pdf
footprint MODULE_LM2596 (MODULE BUCK STEP DOWN 3A 43x20mm)
pins: 1 OUT-, 2 OUT+, 3 IN+, 4 IN-

## MODULE_MT3608
designator U?
MODULE BUCK STEP UP 2A 37x17mm; ComponentLink1Description: Datasheet; ComponentLink1URL: https://www.olimex.com/Products/Breadboarding/BB-PWR-3608/resources/MT3608.pdf
footprint MODULE_MT3608 (MODULE BUCK STEP UP 2A)
pins: 1 VOUT+, 2 VOUT-, 3 VIN+, 4 VIN-

## MODULE_XL4005
designator U?
MODULE BUCK STEP DOWN 5A 44x21mm; ComponentLink1Description: Datasheet; ComponentLink1URL: https://www.laskakit.cz/user/related_files/xl4005_datasheet.pdf
footprint MODULE_XL4005 (MODULE BUCK STEP DOWN 5A 44x21mm)
pins: 1 OUT-, 2 OUT+, 3 IN+, 4 IN-

## MODULE_XL6009
designator U?
MODULE BUCK STEP UP 5A 44x21mm
footprint MODULE_XL6009 (MODULE BUCK STEP UP 5A 44x21mm)
pins: 1 OUT-, 2 OUT+, 3 IN+, 4 IN-

## MP2307DN
designator U?
IC BUCK STEP DOW 3A SOIC8N
footprint MP2307DN (SOIC8N)
pins: 1 BS, 2 IN, 3 SW, 4 GND, 5 FB, 6 COMP, 7 EN, 8 SS

## MT3608
designator U?
IC BUCK STEP UP 2A SOT23-6; ComponentLink1Description: Datasheet; ComponentLink1URL: https://www.olimex.com/Products/Breadboarding/BB-PWR-3608/resources/MT3608.pdf; JLCPCB PN: C84817
footprint MT3608 (SOT-23-6)
pins: 1 SW, 2 GND, 3 FB, 4 EN, 5 IN, 6 NC

## TPS737XX
designator U?
IC REG LINEAR 1A SOT223-6 130mV DROPOUT; ComponentLink1Description: Datasheet; ComponentLink1URL: https://www.ti.com/lit/ds/symlink/tps737.pdf?HQS=dis-mous-null-mousermode-dsf-pf-null-wwe&ts=1673550101133&ref_url=https%253A%252F%252Fwww.mouser.it%252F; Mouser PN: 595-TPS73733DCQ; Digikey PN: 296-22681-1-ND; JLCPCB PN: C31334
footprint TPS737XX (SOT223-6)
pins: 1 VIN, 2 VOUT, 3 GND, 4 NR/FB, 5 EN, 6 GND

## TPS56121DQPR
designator U?
IHC BUCK STEP DOWN CONVERTER UP 15A PQFN; Digikey PN: 296-37678-2-ND; ComponentLink1Description: Datasheet; ComponentLink1URL: https://www.ti.com/lit/ds/symlink/tps56121.pdf?ts=1678731201020&ref_url=https%253A%252F%252Fwww.google.com%252F; Mouser PN: 595-TPS56121DQPR; JLCPCB PN: C494501
footprint TPS56121DQPR (LSON-CLIP-22-EP(5x6))
pins: 1 COMP, 2 FB, 3 GND, 4 GND, 5 BOOT, 6 SW, 7 SW, 8 SW, 9 SW, 10 SW, 11 SW, 12 VIN, 13 VIN, 14 VIN, 15 VIN, 16 VIN, 17 VIN, 18 ILIM, 19 BP, 20 VDD, 21 EN/SS, 22 PGD

## U3V40x
designator U?
Pololu Step-Up Voltage Regulators 4A.; Link: https://www.pololu.com/category/287/u3v40x-step-up-voltage-regulators
footprint U3V40x
pins: 1 EN, 2 VIN, 3 GND, 4 VOUT

## U3V70x
designator U?
Pololu Step-Up Voltage Regulators 8A.; Link: https://www.pololu.com/category/243/u3v70x-step-up-voltage-regulators
footprint U3V70x
pins: 1 EN, 2 GND, 3 VIN, 4 GND, 5 VOUT

## XL4005
designator U?
IC BUCK STEP DOWN 5A TO-263-5L; ComponentLink1Description: Datasheet; ComponentLink1URL: https://www.laskakit.cz/user/related_files/xl4005_datasheet.pdf; JLCPCB PN: C73332
footprint TO-263-5L
pins: 1 GND, 2 FB, 3 SW, 4 EN, 5 VIN, 6 SW

## XL6009
designator U?
IC BOOST STEP UP 5A TO-263-5L
footprint TO-263-5L
pins: 1 GND, 2 EN, 3 SW, 4 VIN, 5 FB, 6 SW


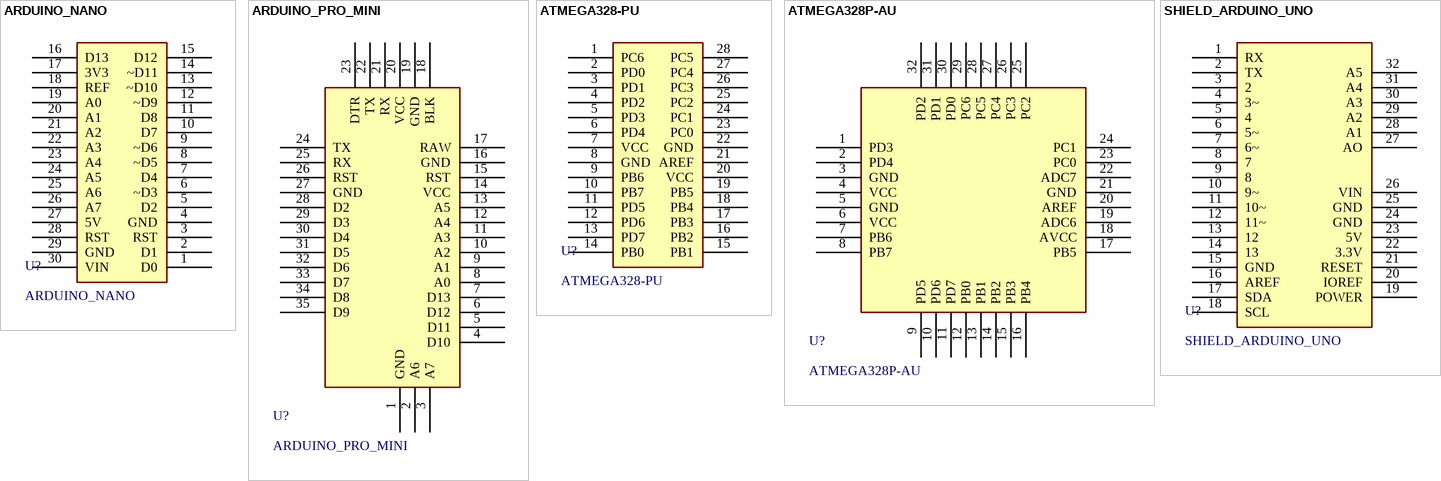
[diagram p13: symbols ARDUINO_NANO to SHIELD_ARDUINO_UNO]

## ARDUINO_NANO
designator U?
Based on ATmega328P, Clock 16MHz, Flash 32KB, 14 Digital Pins, 8 Analog Pins, 5V, Vin 7-12V.; ComponentLink1Description: Datasheet; ComponentLink1URL: https://ww1.microchip.com/downloads/en/DeviceDoc/Atmel-7810-Automotive-Microcontrollers-ATmega328P_Datasheet.pdf
footprint ARDUINO_NANO (Based on ATmega328P, clock 16MHz, flash 32KB, 14 Digital Pins, 8 Analog Pins, 5V, Vin 7-12V.)
pins: 1 D0, 2 D1, 3 RST, 4 GND, 5 D2, 6 ~D3, 7 D4, 8 ~D5, 9 ~D6, 10 D7, 11 D8, 12 ~D9, 13 ~D10, 14 ~D11, 15 D12, 16 D13, 17 3V3, 18 REF, 19 A0, 20 A1, 21 A2, 22 A3, 23 A4, 24 A5, 25 A6, 26 A7, 27 5V, 28 RST, 29 GND, 30 VIN

## ARDUINO_PRO_MINI
designator U?
Based on ATmega328P, Clock 8/16MHz, Flash 32KB, 14 Digital Pins, 8 Analog Pins, 3.3/5V.; ComponentLink1Description: Datasheet; ComponentLink1URL: https://ww1.microchip.com/downloads/en/DeviceDoc/Atmel-7810-Automotive-Microcontrollers-ATmega328P_Datasheet.pdf
footprint ARDUINO_PRO_MINI (Based on ATmega328P, clock 8/16MHz, flash 32KB, 14 Digital Pins, 8 Analog Pins, 3.3/5V.)
pins: 1 GND, 2 A6, 3 A7, 4 D10, 5 D11, 6 D12, 7 D13, 8 A0, 9 A1, 10 A2, 11 A3, 12 A4, 13 A5, 14 VCC, 15 RST, 16 GND, 17 RAW, 18 BLK, 19 GND, 20 VCC, 21 RX, 22 TX, 23 DTR, 24 TX, 25 RX, 26 RST, 27 GND, 28 D2, 29 D3, 30 D4, 31 D5, 32 D6, 33 D7, 34 D8, 35 D9

## ATMEGA328-PU
designator U?
AVR Microcontroller 8 Bits, Clock max 20MHz, Flash 32KB, 2KB SRAM, 1KB EEPROM, 23 GPIOs, 1.8-5.5V, DIP-28.; ComponentLink1Description: Datasheet; ComponentLink1URL: https://ww1.microchip.com/downloads/en/DeviceDoc/ATmega48A-PA-88A-PA-168A-PA-328-P-DS-DS40002061B.pdf; Mouser PN: 556-ATMEGA328P-PU; Digikey PN: ATMEGA328P-PU-ND; JLCPCB PN: C613508
footprint DIP-28
pins: 1 PC6, 2 PD0, 3 PD1, 4 PD2, 5 PD3, 6 PD4, 7 VCC, 8 GND, 9 PB6, 10 PB7, 11 PD5, 12 PD6, 13 PD7, 14 PB0, 15 PB1, 16 PB2, 17 PB3, 18 PB4, 19 PB5, 20 VCC, 21 AREF, 22 GND, 23 PC0, 24 PC1, 25 PC2, 26 PC3, 27 PC4, 28 PC5

## ATMEGA328P-AU
designator U?
AVR Microcontroller 8 Bits, Clock max 20MHz, Flash 32KB, 2KB SRAM, 1KB EEPROM, 23 GPIOs, 1.8-5.5V, TQFP-32(7x7).; Mouser PN: 556-ATMEGA328P-AU; Digikey PN: ATMEGA328P-AU-ND; JLCPCB PN: C132230; ComponentLink1Description: Datasheet; ComponentLink1URL: https://ww1.microchip.com/downloads/en/DeviceDoc/ATmega48A-PA-88A-PA-168A-PA-328-P-DS-DS40002061B.pdf
footprint TQFP-32 (TQFP-32(7x7))
pins: 1 PD3, 2 PD4, 3 GND, 4 VCC, 5 GND, 6 VCC, 7 PB6, 8 PB7, 9 PD5, 10 PD6, 11 PD7, 12 PB0, 13 PB1, 14 PB2, 15 PB3, 16 PB4, 17 PB5, 18 AVCC, 19 ADC6, 20 AREF, 21 GND, 22 ADC7, 23 PC0, 24 PC1, 25 PC2, 26 PC3, 27 PC4, 28 PC5, 29 PC6, 30 PD0, 31 PD1, 32 PD2

## SHIELD_ARDUINO_UNO
designator U?
General Shield for Arduino Uno.
footprint ARDUINO_UNO_SHIELD
pins: 1 RX, 2 TX, 3 2, 4 3~, 5 4, 6 5~, 7 6~, 8 7, 9 8, 10 9~, 11 10~, 12 11~, 13 12, 14 13, 15 GND, 16 AREF, 17 SDA, 18 SCL, 19 POWER, 20 IOREF, 21 RESET, 22 3.3V, 23 5V, 24 GND, 25 GND, 26 VIN, 27 AO, 28 A1, 29 A2, 30 A3, 31 A4, 32 A5


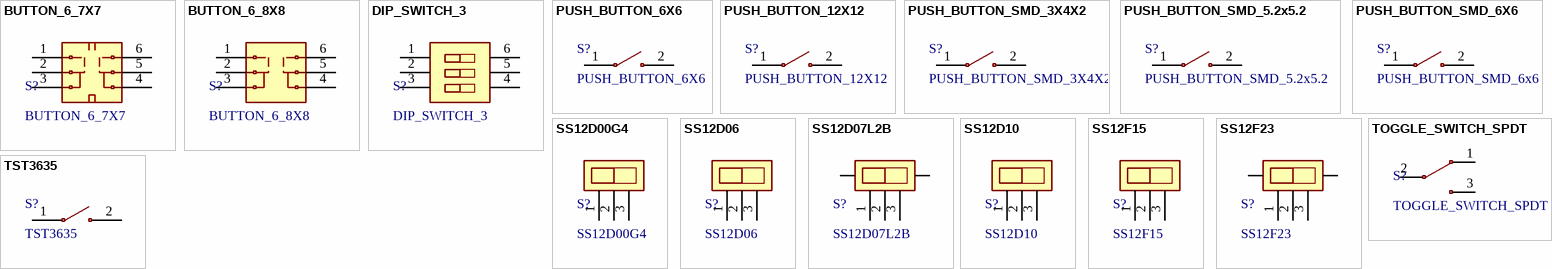
[diagram p14: symbols BUTTON_6_7X7 to TST3635]

## BUTTON_6_7X7
designator S?
Button Latch 6 Pins 7x7mm.; JLCPCB PN: C318863
footprint BUTTON_6_7X7
pins: 1, 2, 3, 4, 5, 6

## BUTTON_6_8X8
designator S?
Button Latch 6 Pins 8x8mm.; JLCPCB PN: C318860
footprint BUTTON_6_8x8
pins: 1, 2, 3, 4, 5, 6

## DIP_SWITCH_3
designator S?
Dip Switch 3 Vias, PTH or SMD.; JLCPCB PN SMD: C2842910; JLCPCB PN PTH: C190371
footprint DIP_SWITCH_3
footprint DIP_SWITCH_3_SMD
pins: 1, 2, 3, 4, 5, 6

## PUSH_BUTTON_6X6
designator S?
Push Button Tactile Switch PTH 4 Pins 6x6mm.; JLCPCB PN: C255811
footprint PUSH_BUTTON_6X6
pins: 1, 2

## PUSH_BUTTON_12X12
designator S?
Push Button Tactile Switch PTH 4 Pins 12x12mm.; Mouser PN: 992-BUTT-12-5; JLCPCB PN: C84931
footprint PUSH_BUTTON_12X12_BLUE
footprint PUSH_BUTTON_12X12_GREEN
footprint PUSH_BUTTON_12X12_RED
footprint PUSH_BUTTON_12X12_YELLOW
footprint PUSH_BUTTON_12X12_WHITE
pins: 1, 2

## PUSH_BUTTON_SMD_3X4X2
designator S?
Push Button Tactile Switch SMD 2 Pins 3x4x2mm.; JLCPCB PN: C231644
footprint PUSH_BUTTON_SMD_3X4X2
pins: 1, 2

## PUSH_BUTTON_SMD_5.2x5.2
designator S?
Push Button Tactile Switch SMD 4 Pins 5.2x5.2mm.; JLCPCB PN: C108649
footprint PUSH_BUTTON_SMD_5.2x5.2
pins: 1, 2

## PUSH_BUTTON_SMD_6X6
designator S?, comment PUSH_BUTTON_SMD_6x6
Push Button Tactile Switch SMD 4 Pins 6x6mm.; JLCPCB PN: C231324
footprint PUSH_BUTTON_SMD_6x6
pins: 1, 2

## SS12D00G4
designator S?
Vertical Slide Switch 3 Pins.
footprint SS12D00G4
pins: 1, 2, 3

## SS12D06
designator S?
Lying Slide Switch 3 Pins.
footprint SS12D06
pins: 1, 2, 3

## SS12D07L2B
designator S?
Vertical Slide Switch 5 Pins 8.7x4.5x4.7mm.; JLCPCB PN: C480342
footprint SS12D07L2B
pins: 1, 2, 3

## SS12D10
designator S?
Vertical Slide Switch 3 Pins 6.7x12.7x6.4mm.; JLCPCB PN: C2887259
footprint SS12D10
pins: 1, 2, 3

## SS12F15
designator S?
Vertical Slide Switch 3 Pins 6x19.5x5mm.; JLCPCB PN: C2887260; ComponentLink1Description: Datasheet; ComponentLink1URL: https://dalincom.ru/datasheet/SS-12F15.pdf
footprint SS12F15
pins: 1, 2, 3

## SS12F23
designator S?
Lying Slide Switch 5 Pins 6.8x13x5.7mm.; JLCPCB PN: C2887262
footprint SS12F23
pins: 1, 2, 3

## TOGGLE_SWITCH_SPDT
designator S?
Toggle Switch SPDT, 125V AC, 6A, 33x13x7mm.; JLCPCB PN: C2921493
footprint TOGGLE_SWITCH_SPDT
pins: 1, 2, 3

## TST3635
designator S?
Push Button Tactile Switch SMD Side 2 Pins.; JLCPCB PN: C319380
footprint TST3635
pins: 1, 2


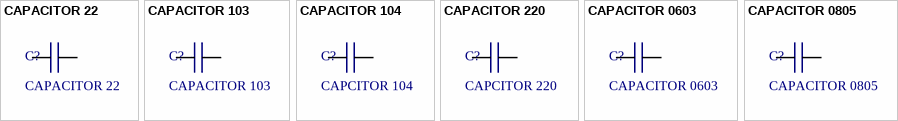
[diagram p15: symbols CAPACITOR 22 to CAPACITOR 0805]

## CAPACITOR 22
designator C?
Ceramic Capacitor 22, 3mm.
footprint CAPACITOR 22
pins: 1, 2

## CAPACITOR 103
designator C?
Ceramic Capacitor 103, 5mm.
footprint CAPACITOR 103
pins: 1, 2

## CAPACITOR 104
designator C?, comment CAPCITOR 104
Ceramic Capacitor 104, 3mm.
footprint CAPACITOR 104
pins: 1, 2

## CAPACITOR 220
designator C?, comment CAPCITOR 220
Ceramic Capacitor 220, 6mm.
footprint CAPACITOR 220
pins: 1, 2

## CAPACITOR 0603
designator C?
Generic Capacitor 0603, 1.6x0.8x0.9mm.
footprint CAPACITOR 0603
pins: 1, 2

## CAPACITOR 0805
designator C?
Generic Capacitor 0805, 2x1.25x1.4mm.
footprint CAPACITOR 0805
pins: 1, 2


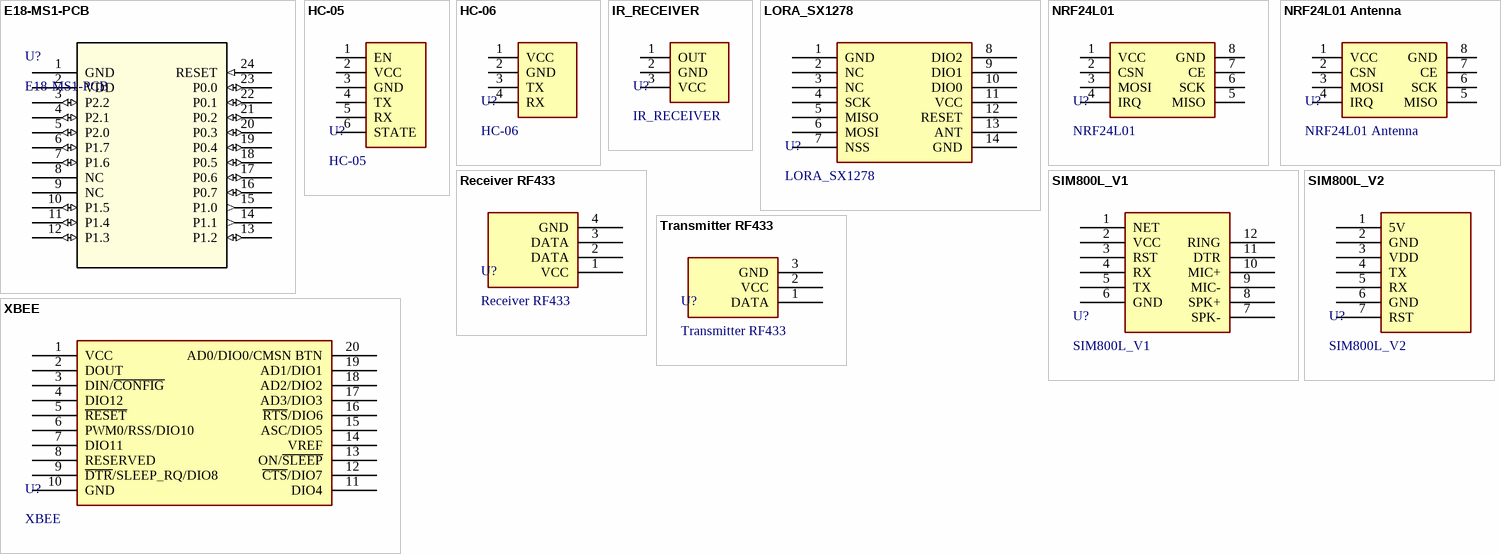
[diagram p16: symbols E18-MS1-PCB to XBEE]

## E18-MS1-PCB
designator U?
Module zigbee; Manufacturer_Name: Chengdu Ebyte Elec Tech; Copyright: Copyright (C) 2026 Ultra Librarian. All rights reserved.; Manufacturer_Part_Number: E18-MS1-PCB; RefDes: RefDes; Type: Type
footprint E18-MS1-PCB_BYT
pins: 1 GND (power), 2 VDD (power), 3 P2.2 (io), 4 P2.1 (io), 5 P2.0 (io), 6 P1.7 (io), 7 P1.6 (io), 8 NC, 9 NC, 10 P1.5 (io), 11 P1.4 (io), 12 P1.3 (io), 13 P1.2 (io), 14 P1.1 (out), 15 P1.0 (out), 16 P0.7 (io), 17 P0.6 (io), 18 P0.5 (io), 19 P0.4 (io), 20 P0.3 (io), 21 P0.2 (io), 22 P0.1 (io), 23 P0.0 (io), 24 RESET (in)

## HC-05
designator U?
BLUETOOTH MODULE, 6 Pins
footprint HC-05 (BLUETOOTH MODULE)
pins: 1 EN, 2 VCC, 3 GND, 4 TX, 5 RX, 6 STATE

## HC-06
designator U?
BLUETOOTH MODULE, 4 Pins.
footprint HC-06 (BLUETOOTH MODULE)
pins: 1 VCC, 2 GND, 3 TX, 4 RX

## IR_RECEIVER
designator U?
INFRARED RECEIVER SENSOR; Digikey PN: 1528-157-ND; Mouser PN: 782-TSMP58138; JLCPCB PN: C131209
footprint IR_Receiver (INFRARED RECEIVER SENSOR)
pins: 1 OUT, 2 GND, 3 VCC

## LORA_SX1278
designator U?
footprint LORA_SX1278
footprint LORA_SX1278
pins: 1 GND, 2 NC, 3 NC, 4 SCK, 5 MISO, 6 MOSI, 7 NSS, 8 DIO2, 9 DIO1, 10 DIO0, 11 VCC, 12 RESET, 13 ANT, 14 GND

## NRF24L01
designator U?
MÓDULO TRANSCEPTOR RF WIRELESS 2.4GHZ
footprint NRF24L01 (MÓDULO TRANSCEPTOR RF WIRELESS 2.4GHZ)
pins: 1 VCC, 2 CSN, 3 MOSI, 4 IRQ, 5 MISO, 6 SCK, 7 CE, 8 GND

## NRF24L01 Antenna
designator U?
MÓDULO TRANSCEPTOR RF WIRELESS 2.4GHZ W/ ANTENNA
footprint NRF24L01 Antenna (MÓDULO TRANSCEPTOR RF WIRELESS 2.4GHZ W/ ANTENNA)
pins: 1 VCC, 2 CSN, 3 MOSI, 4 IRQ, 5 MISO, 6 SCK, 7 CE, 8 GND

## Receiver RF433
designator U?
RF RECEIVER MODULE 433MGZ
footprint Receiver RF433
pins: 1 VCC, 2 DATA, 3 DATA, 4 GND

## SIM800L_V1
designator U?
footprint SIM800L_V1
pins: 1 NET, 2 VCC, 3 RST, 4 RX, 5 TX, 6 GND, 7 SPK-, 8 SPK+, 9 MIC-, 10 MIC+, 11 DTR, 12 RING

## SIM800L_V2
designator U?
footprint SIM800L_V2
pins: 1 5V, 2 GND, 3 VDD, 4 TX, 5 RX, 6 GND, 7 RST

## Transmitter RF433
designator U?
RF TRANSMITTER MODULE 433MGZ
footprint Transmitter RF433
pins: 1 DATA, 2 VCC, 3 GND

## XBEE
designator U?
RF TRANSCEIVER MODULE 2.4GHZ; Digikey PN: 602-1891-ND; Mouser PN: 888-XB24CAPIT-001
footprint XBEE (RF TRANSCEIVER MODULE 2.4GHZ)
pins: 1 VCC, 2 DOUT, 3 DIN/~{CONFIG}, 4 DIO12, 5 ~{RESET}, 6 PWM0/RSS/DIO10, 7 DIO11, 8 RESERVED, 9 ~{DTR}/SLEEP_RQ/DIO8, 10 GND, 11 DIO4, 12 ~{CTS}/DIO7, 13 ON/~{SLEEP}, 14 VREF, 15 ASC/DIO5, 16 ~{RTS}/DIO6, 17 AD3/DIO3, 18 AD2/DIO2, 19 AD1/DIO1, 20 AD0/DIO0/CMSN BTN


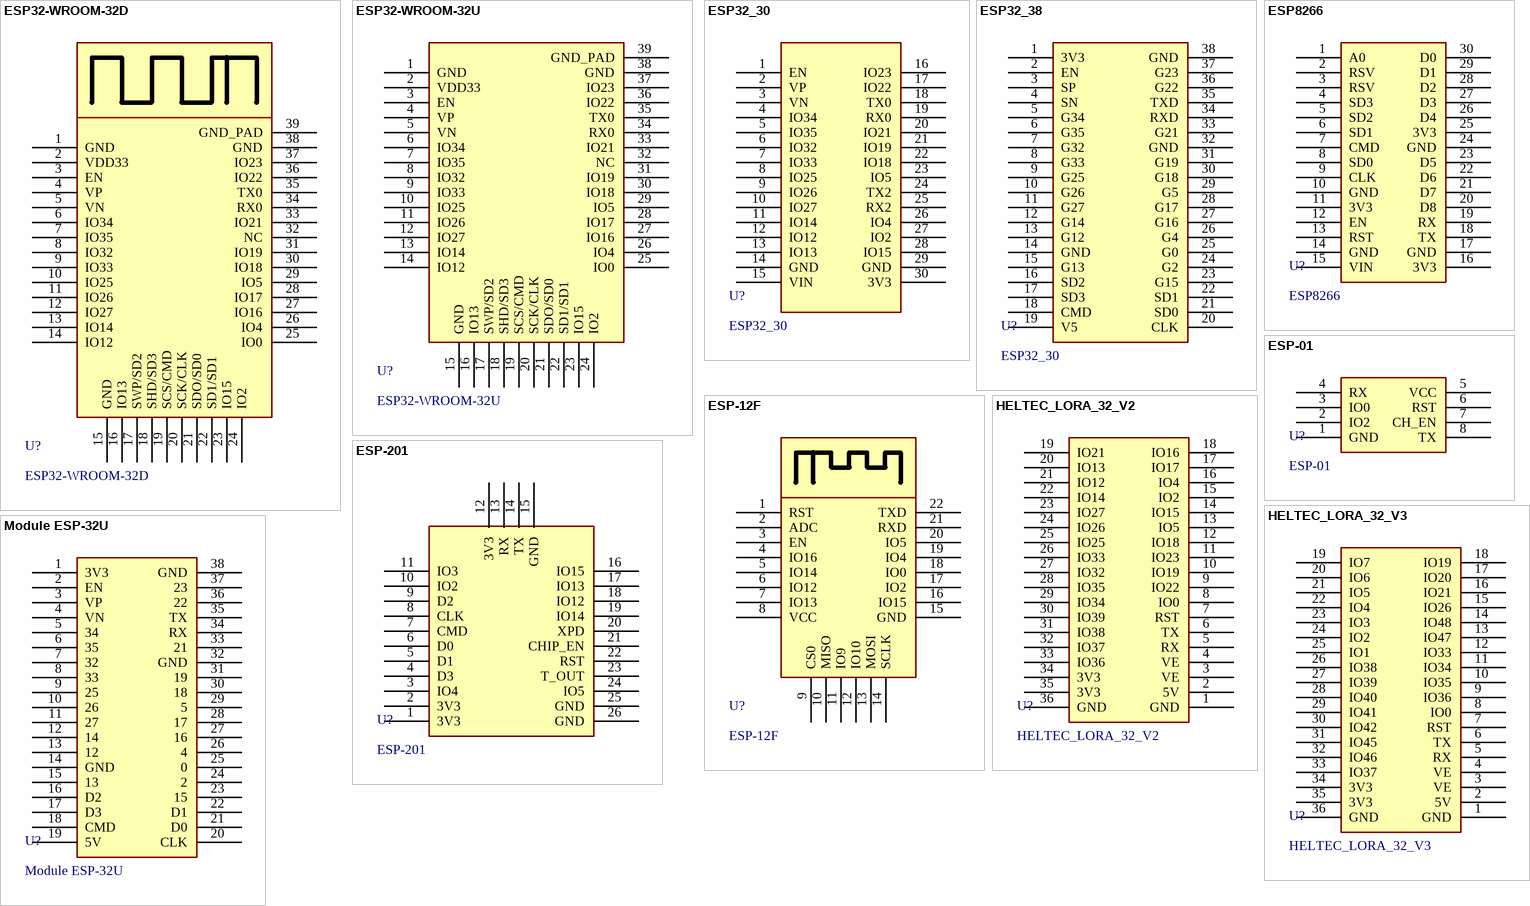
[diagram p17: symbols ESP32-WROOM-32D to Module ESP-32U]

## ESP32-WROOM-32D
designator U?
Chip SMD 39 Pads Wifi 2.4GHz BLE 4.2 18x25.5mm w/ Antenna.; Mouser PN: ESP32-WROOM-32D-N4; Digikey PN: 1965-ESP32-WROOM-32D-N8CT-ND; ComponentLink1Description: Datasheet; ComponentLink1URL: https://www.mouser.com/datasheet/2/891/esp32_wroom_32d_esp32_wroom_32u_datasheet_en-1365844.pdf; JLCPCB PN: C82899
footprint ESP32-WROOM-32D (Chip SMD 39 Pads 18x25.5mm w/ Antenna.)
pins: 1 GND, 2 VDD33, 3 EN, 4 VP, 5 VN, 6 IO34, 7 IO35, 8 IO32, 9 IO33, 10 IO25, 11 IO26, 12 IO27, 13 IO14, 14 IO12, 15 GND, 16 IO13, 17 SWP/SD2, 18 SHD/SD3, 19 SCS/CMD, 20 SCK/CLK, 21 SDO/SD0, 22 SD1/SD1, 23 IO15, 24 IO2, 25 IO0, 26 IO4, 27 IO16, 28 IO17, 29 IO5, 30 IO18, 31 IO19, 32 NC, 33 IO21, 34 RX0, 35 TX0, 36 IO22, 37 IO23, 38 GND, 39 GND_PAD

## ESP32-WROOM-32U
designator U?
Chip SMD 39 Pads Wifi 2.4GHz BLE 4.2 18x19.2mm w/o Antenna.
footprint ESP32-WROOM-32U (Chip SMD 39 Pads 18x19.2mm w/o Antenna.)
pins: 1 GND, 2 VDD33, 3 EN, 4 VP, 5 VN, 6 IO34, 7 IO35, 8 IO32, 9 IO33, 10 IO25, 11 IO26, 12 IO27, 13 IO14, 14 IO12, 15 GND, 16 IO13, 17 SWP/SD2, 18 SHD/SD3, 19 SCS/CMD, 20 SCK/CLK, 21 SDO/SD0, 22 SD1/SD1, 23 IO15, 24 IO2, 25 IO0, 26 IO4, 27 IO16, 28 IO17, 29 IO5, 30 IO18, 31 IO19, 32 NC, 33 IO21, 34 RX0, 35 TX0, 36 IO22, 37 IO23, 38 GND, 39 GND_PAD

## ESP32_30
designator U?
Microcontoller Board 30 Pins Wifi 2.4GHz BLE 4.2 ESP32-WROOM-32D; ComponentLink1Description: Datasheet; ComponentLink1URL: https://www.mouser.com/datasheet/2/891/esp32_wroom_32d_esp32_wroom_32u_datasheet_en-1365844.pdf
footprint ESP32_30 (Microcontoller Board 30 Pins Wifi 2.4GHz BLE 4.2 ESP32-WROOM-32D)
pins: 1 EN, 2 VP, 3 VN, 4 IO34, 5 IO35, 6 IO32, 7 IO33, 8 IO25, 9 IO26, 10 IO27, 11 IO14, 12 IO12, 13 IO13, 14 GND, 15 VIN, 16 IO23, 17 IO22, 18 TX0, 19 RX0, 20 IO21, 21 IO19, 22 IO18, 23 IO5, 24 TX2, 25 RX2, 26 IO4, 27 IO2, 28 IO15, 29 GND, 30 3V3

## ESP32_38
designator U?, comment ESP32_30
Microcontoller Board 38 Pins Wifi 2.4GHz BLE 4.2 ESP32-WROOM-32D; ComponentLink1Description: Datasheet; ComponentLink1URL: https://www.mouser.com/datasheet/2/891/esp32_wroom_32d_esp32_wroom_32u_datasheet_en-1365844.pdf
footprint ESP32_38 (Microcontoller Board 38 Pins Wifi 2.4GHz BLE 4.2 ESP32-WROOM-32D)
pins: 1 3V3, 2 EN, 3 SP, 4 SN, 5 G34, 6 G35, 7 G32, 8 G33, 9 G25, 10 G26, 11 G27, 12 G14, 13 G12, 14 GND, 15 G13, 16 SD2, 17 SD3, 18 CMD, 19 V5, 20 CLK, 21 SD0, 22 SD1, 23 G15, 24 G2, 25 G0, 26 G4, 27 G16, 28 G17, 29 G5, 30 G18, 31 G19, 32 GND, 33 G21, 34 RXD, 35 TXD, 36 G22, 37 G23, 38 GND

## ESP8266
designator U?
Microcontoller Board 30 Pins Wifi 2.4GHz BLE 4.2 ESP-12F; ComponentLink1Description: Datasheet; ComponentLink1URL: https://docs.ai-thinker.com/_media/esp8266/docs/esp-12f_product_specification_en.pdf
footprint ESP8266 (Microcontoller Board 30 Pins Wifi 2.4GHz BLE 4.2 ESP-12F)
pins: 1 A0, 2 RSV, 3 RSV, 4 SD3, 5 SD2, 6 SD1, 7 CMD, 8 SD0, 9 CLK, 10 GND, 11 3V3, 12 EN, 13 RST, 14 GND, 15 VIN, 16 3V3, 17 GND, 18 TX, 19 RX, 20 D8, 21 D7, 22 D6, 23 D5, 24 GND, 25 3V3, 26 D4, 27 D3, 28 D2, 29 D1, 30 D0